# Altium schematic symbol library SG2002_QFN88_38_20230301_4L_V1.3_16.2_Library.SchLib: 126 symbols (part 4 of 5)
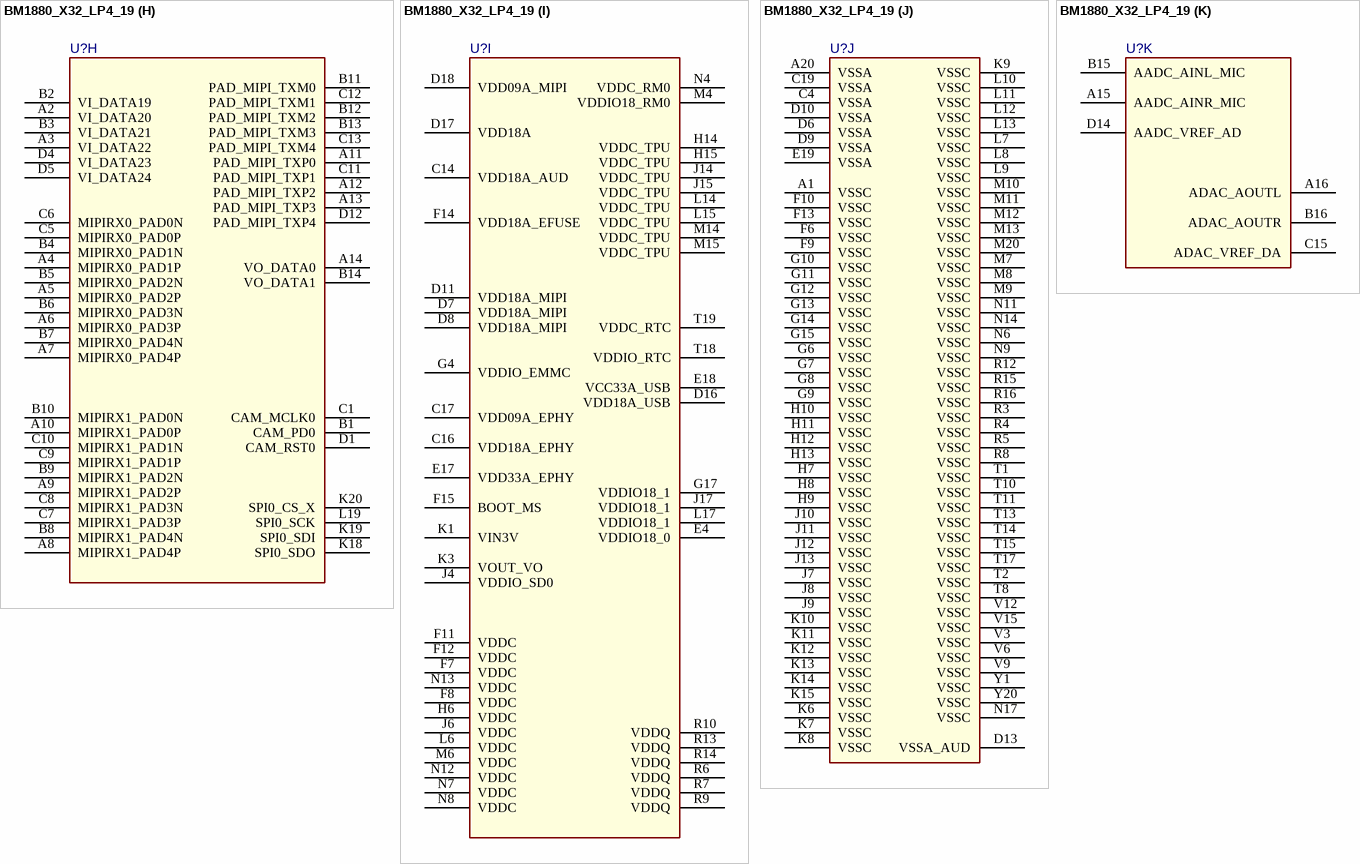
[diagram p52: symbol BM1880_X32_LP4_19]

## BM1880_X32_LP4_19
designator U?
SWAP_INFO: (S1+S2+S3+S4+S5+S6+S7+S8+S9+S10); SPLIT_INST: TRUE
footprint BGA378-26-2121-socket
part A pins: N10 VDD18A_MIPI(DDR_CAP), R11 VDD_RX, T3 PAD_CSB1______|D3C_CS1_N__|D3S_CS1_N__|D4C_CS1_N__|D4S_CS1_N__|LP4_CHB_CS_N__|, T4 PAD_CA_2______|D3C_ODT1___|D3S_ODT1___|D4C_ODT1___|D4S_ODT1___|______________|, T5 PAD_CKE1______|D3C_CKE1___|D3S_CKE1___|D4C_CKE1___|D4S_CKE1___|LP4_CKEB______|, T6 PAD_CLKN1_____|D3C_CK1N___|D3S_CK1N___|D4C_CK1_N__|D4S_CK1_N__|LP4_CKB_N_____|, T7 PAD_CLKP1_____|D3C_CK1P___|D3S_CK1P___|D4C_CK1_P__|D4S_CK1_P__|LP4_CKB_P_____|, T20 ZQ, U1 PAD_CA_3______|D3C_A7_____|D3S_A8_____|D4C_A8_____|D4S_A13____|LP4_CA3_______|, U2 PAD_CA_0______|D3C_A8_____|D3S_A14____|D4C_A11____|D4S_A7_____|LP4_CA2_______|, U3 PAD_RESETZ____|D3C_RESET_N|D3S_RESET_N|D4C_RESET_N|D4S_RESET_N|LP4_RESET_N___|, U4 PAD_CA_9______|D3C_A13____|D3S_A9_____|D4C_A7_____|D4S_A0_____|______________|, U5 PAD_CA_14_____|D3C_A15____|D3S_WE_N___|D4C_WE/A14_|D4S_BG0____|______________|, U6 PAD_CA_16_____|D3C_A10____|D3S_CAS_N__|D4C_CAS_N__|D4S_WE/A14_|______________|, U7 PAD_CLKN0_____|D3C_CK_N___|D3S_CK_N___|D4C_CK0_N__|D4S_CK0_N__|LP4_CKA_N_____|, U8 PAD_CLKP0_____|D3C_CK_P___|D3S_CK_P___|D4C_CK0_P__|D4S_CK0_P__|LP4_CKA_P_____|, U9 PAD_DQ_BYTE0_1|D3C_DQ1____|D3S_DQ6____|D4C_DQ23___|D4S_DQ0____|LP4_CHB_DQ7___|, U10 PAD_DQSN_BYTE0|D3C_DQS0_N_|D3S_DQS0_N_|D4C_DQS2_N_|D4S_DQS0_N_|LP4_CHB_DQS0_N|, U11 PAD_DQSP_BYTE0|D3C_DQS0_P_|D3S_DQS0_P_|D4C_DQS2_P_|D4S_DQS0_P_|LP4_CHB_DQS0_P|, U12 PAD_DQ_BYTE1_4|D3C_DQ21___|D3S_DQ15___|D4C_DQ7____|D4S_DQ8____|LP4_CHB_DQ8___|, U13 PAD_DQSN_BYTE1|D3C_DQS2_N_|D3S_DQS1_N_|D4C_DQS0_N_|D4S_DQS1_N_|LP4_CHB_DQS1_N|, U14 PAD_DQSP_BYTE1|D3C_DQS2_P_|D3S_DQS1_P_|D4C_DQS0_P_|D4S_DQS1_P_|LP4_CHB_DQS1_P|, U15 PAD_DQ_BYTE2_5|D3C_DQ26___|D3S_DQ22___|D4C_DQ11___|D4S_DQ16___|LP4_CHA_DQ3___|, U16 PAD_DQSN_BYTE2|D3C_DQS3_N_|D3S_DQS2_N_|D4C_DQS1_N_|D4S_DQS2_N_|LP4_CHA_DQS0_N|, U17 PAD_DQSP_BYTE2|D3C_DQS3_P_|D3S_DQS2_P_|D4C_DQS1_P_|D4S_DQS2_P_|LP4_CHA_DQS0_P|, U18 PAD_DQ_BYTE3_6|D3C_DQ11___|D3S_DQ29___|D4C_DQ25___|D4S_DQ24___|LP4_CHA_DM1___|, U19 PAD_DQSN_BYTE3|D3C_DQS1_N_|D3S_DQS3_N_|D4C_DQS3_N_|D4S_DQS3_N_|LP4_CHA_DQS1_N|, U20 PAD_DQSP_BYTE3|D3C_DQS1_P_|D3S_DQS3_P_|D4C_DQS3_P_|D4S_DQS3_P_|LP4_CHA_DQS1_P|, V1 PAD_CA_1______|D3C_A5_____|D3S_A11____|D4C_A6_____|D4S_A11____|LP4_CA4_______|, V2 PAD_CA_4______|D3C_A9_____|D3S_A2_____|D4C_A13____|D4S_A6_____|______________|, V4 PAD_CA_12_____|D3C_A6_____|D3S_BA2____|D4C_BA0____|D4S_BA0____|______________|, V5 PAD_CA_8______|D3C_BA0____|D3S_BA0____|D4C_A3_____|D4S_A4_____|______________|, V7 PAD_CA_19_____|D3C_WE_N___|D3S_ODT____|D4C_ACT_N__|D4S_A10____|LP4_CA0_______|, V8 VREF-LP4_NC, V10 PAD_DQ_BYTE0_4|D3C_DQ5____|D3S_DQ4____|D4C_DQ19___|D4S_DQ4____|LP4_CHB_DQ6___|, V11 PAD_DQ_BYTE0_8|D3C_DM0____|D3S_DQ2____|D4C_DQ16___|D4S_DQ2____|LP4_CHB_DQ5___|, V13 PAD_DQ_BYTE1_8|D3C_DQ23___|D3S_DQ11___|D4C_DQ3____|D4S_DQ10___|LP4_CHB_DQ9___|, V14 PAD_DQ_BYTE1_6|D3C_DQ22___|D3S_DM1____|D4C_DM0____|D4S_DM1____|LP4_CHB_DQ11__|, V16 PAD_DQ_BYTE2_7|D3C_DQ30___|D3S_DQ20___|D4C_DQ13___|D4S_DQ20___|LP4_CHA_DQ4___|, V17 PAD_DQ_BYTE2_8|D3C_DQ29___|D3S_DQ18___|D4C_DQ9____|D4S_DQ18___|LP4_CHA_DQ6___|, V18 PAD_DQ_BYTE3_7|D3C_DQ10___|D3S_DQ25___|D4C_DQ29___|D4S_DQ30___|LP4_CHA_DQ10__|, V19 PAD_DQ_BYTE3_0|D3C_DQ14___|D3S_DM3____|D4C_DQ27___|D4S_DM3____|LP4_CHA_DQ11__|, V20 PAD_DQ_BYTE3_2|D3C_DQ12___|D3S_DQ26___|D4C_DQ30___|D4S_DQ27___|LP4_CHA_DQ8___|, W1 PAD_CA_6______|D3C_A2_____|D3S_A5_____|D4C_A2_____|D4S_A2_____|LP4_CA5_______|, W2 PAD_CA_5______|D3C_A14____|D3S_A0_____|D4C_A0_____|D4S_A8_____|LP4_CB5_______|, W3 PAD_CA_7______|D3C_A11____|D3S_A3_____|D4C_A5_____|D4S_A5_____|______________|, W4 PAD_CA_11_____|D3C_A0_____|D3S_A4_____|D4C_A1_____|D4S_BA1____|______________|, W5 PAD_CA_17_____|D3C_A12____|D3S_BA1____|D4C_BA1____|D4S_CAS_N__|LP4_CB3_______|, W6 PAD_CA_18_____|D3C_BA1____|D3S_A10____|D4C_A12____|D4S_RAS_N__|LP4_CB1_______|, W7 PAD_CA_20_____|D3C_CAS_N__|D3S_RAS_N__|c__________|D4S_ACT_N__|LP4_CA1_______|, W8 PAD_CA_23_____|D3C_RAS_N__|D3S_A7_____|___________|___________|______________|, W9 PAD_DQ_BYTE0_2|D3C_DQ3____|D3S_DQ7____|D4C_DQ18___|D4S_DQ7____|LP4_CHB_DQ0___|, W10 PAD_DQ_BYTE0_5|D3C_DQ6____|D3S_DQ1____|D4C_DQ22___|D4S_DQ5____|LP4_CHB_DQ1___|, W11 PAD_DQ_BYTE0_7|D3C_DQ0____|D3S_DM0____|D4C_DQ17___|D4S_DM0____|LP4_CHB_DQ4___|, W12 PAD_DQ_BYTE1_2|D3C_DQ20___|D3S_DQ13___|D4C_DQ6____|D4S_DQ12___|LP4_CHB_DQ15__|, W13 PAD_DQ_BYTE1_1|D3C_DQ17___|D3S_DQ12___|D4C_DQ4____|D4S_DQ9____|LP4_CHB_DQ13__|, W14 PAD_DQ_BYTE1_7|D3C_DM2____|D3S_DQ10___|D4C_DQ1____|D4S_DQ11___|LP4_CHB_DQ10__|, W15 PAD_DQ_BYTE2_2|D3C_DQ28___|D3S_DQ23___|D4C_DQ12___|D4S_DQ23___|LP4_CHA_DQ2___|, W16 PAD_DQ_BYTE2_1|D3C_DQ25___|D3S_DQ17___|D4C_DQ10___|D4S_DQ21___|LP4_CHA_DQ1___|, W17 PAD_DQ_BYTE2_4|D3C_DQ31___|D3S_DM2____|D4C_DQ15___|D4S_DM2____|LP4_CHA_DQ7___|, W18 PAD_DQ_BYTE3_4|D3C_DQ13___|D3S_DQ27___|D4C_DQ31___|D4S_DQ26___|LP4_CHA_DQ12__|, W19 PAD_DQ_BYTE3_5|D3C_DM1____|D3S_DQ30___|D4C_DM3____|D4S_DQ29___|LP4_CHA_DQ9___|, W20 PAD_DQ_BYTE3_8|D3C_DQ8A___|D3S_DQ28___|D4C_DQ24___|D4S_DQ25___|LP4_CHA_DQ15__|, Y2 PAD_CA_10_____|D3C_A3_____|D3S_A6_____|D4C_A9_____|D4S_A9_____|LP4_CB4_______|, Y3 PAD_CA_15_____|D3C_A4_____|D3S_A1_____|D4C_A4_____|D4S_A1_____|______________|, Y4 PAD_CA_13_____|D3C_A1_____|D3S_A12____|D4C_BG0____|D4S_A3_____|LP4_CB2_______|, Y5 PAD_CA_21_____|D3C_BA2____|D3S_A15____|D4C_A10____|D4S_A12____|LP4_CB0_______|, Y6 PAD_CKE0______|D3C_CKE____|D3S_CKE____|D4C_CKE0___|D4S_CKE0___|LP4_CKEA______|, Y7 PAD_CA_22_____|D3C_ODT____|D3S_A13____|D4C_ODT0___|D4S_ODT0___|______________|, Y8 PAD_CSB0______|D3C_CS_N___|D3S_CS0_N__|D4C_CS0_N__|D4S_CS0_N__|LP4_CHA_CS_N__|, Y9 PAD_DQ_BYTE0_0|D3C_DQ4____|D3S_DQ0____|D4C_DM2____|D4S_DQ6____|LP4_CHB_DM0___|, Y10 PAD_DQ_BYTE0_3|D3C_DQ7____|D3S_DQ5____|D4C_DQ20___|D4S_DQ3____|LP4_CHB_DQ2___|, Y11 PAD_DQ_BYTE0_6|D3C_DQ2____|D3S_DQ3____|D4C_DQ21___|D4S_DQ1____|LP4_CHB_DQ3___|, Y12 PAD_DQ_BYTE1_0|D3C_DQ19___|D3S_DQ8____|D4C_DQ2____|D4S_DQ15___|LP4_CHB_DM1___|, Y13 PAD_DQ_BYTE1_3|D3C_DQ16___|D3S_DQ9____|D4C_DQ5____|D4S_DQ14___|LP4_CHB_DQ14__|, Y14 PAD_DQ_BYTE1_5|D3C_DQ18___|D3S_DQ14___|D4C_DQ0____|D4S_DQ13___|LP4_CHB_DQ12__|, Y15 PAD_DQ_BYTE2_0|D3C_DM3____|D3S_DQ16___|D4C_DM1____|D4S_DQ22___|LP4_CHA_DQ5___|, Y16 PAD_DQ_BYTE2_3|D3C_DQ27___|D3S_DQ21___|D4C_DQ8____|D4S_DQ19___|LP4_CHA_DM0___|, Y17 PAD_DQ_BYTE2_6|D3C_DQ24___|D3S_DQ19___|D4C_DQ14___|D4S_DQ17___|LP4_CHA_DQ0___|, Y18 PAD_DQ_BYTE3_1|D3C_DQ9____|D3S_DQ31___|D4C_DQ26___|D4S_DQ28___|LP4_CHA_DQ13__|, Y19 PAD_DQ_BYTE3_3|D3C_DQ15___|D3S_DQ24___|D4C_DQ28___|D4S_DQ31___|LP4_CHA_DQ14__|
part B pins: F3 SDIO0_PWR_EN, F4 SDIO0_CD, G1 EMMC_DAT3, G2 EMMC_RSTN, H1 EMMC_DAT1, H2 EMMC_DAT0, H3 EMMC_CMD, H4 EMMC_CLK, J2 EMMC_CAP, J3 EMMC_DAT2, K2 SDIO0_CAP, K4 SDIO0_CMD, L1 SDIO0_CLK, L2 SDIO0_D0, L3 SDIO0_D3, L4 SDIO0_D1, M1 SDIO0_D2
part C pins: A19 USB_DP (power), B19 USB_DM (power), E20 USB_VBUS_DET (power), F19 USB_ID (power), F20 USB_VBUS_EN, N15 PTEST
part D pins: C2 IIC0_SDA, C3 IIC3_SCL, D2 IIC0_SCL, D3 IIC3_SDA, J18 IIC2_SCL, J19 IIC2_SDA, J20 IIC1_SCL, K17 IIC1_SDA, L18 PWM3, M17 PWM1, M18 PWM0_BUCK, M19 PWM2
part E pins: C18 ADC1, E1 JTAG_CPU_TCK, E3 JTAG_CPU_TRST, F1 UART0_RX, F2 UART0_TX, F17 UART1_RTS, F18 UART1_CTS, G3 JTAG_CPU_TMS, G18 UART2_CTS, G19 UART1_RX, G20 UART1_TX, H17 UART2_TX, H18 UART2_RX, H19 UART2_RTS
part F pins: A17 EPHY_TXN, A18 EPHY_RXN, B17 EPHY_TXP, B18 EPHY_RXP, D15 EPHY_RTX, M2 RMII0_REFCLKI, M3 RMII0_TXD1, N2 RMII0_TXEN, N3 RMII0_TXD0, P1 RMII0_MDCK, P2 RMII0_MDIO, P3 RMII0_RXD0, P4 RMII0_RST, R1 RMII0_RXDV, R2 RMII0_RXD1
part G pins: B20 XTAL_XIN_XO, C20 XTAL_XIN_XI, D19 CLK32K, D20 CLK25M, E2 RSTN, N18 PWR_ON, N19 PWR_SEQ2, N20 PWR_SEQ3, P17 PWR_WAKEUP1, P18 PWR_VBAT_DET, P19 PWR_BUTTON1, P20 PWR_SEQ1, R17 PWR_WAKEUP0, R18 RTC_MODE, R19 RTC_XIN, R20 RTC_XOUT
part H pins: A2 VI_DATA20 (power), A3 VI_DATA22 (power), A4 MIPIRX0_PAD1P (power), A5 MIPIRX0_PAD2P (power), A6 MIPIRX0_PAD3P (power), A7 MIPIRX0_PAD4P (power), A8 MIPIRX1_PAD4P (power), A9 MIPIRX1_PAD2P (power), A10 MIPIRX1_PAD0P (power), A11 PAD_MIPI_TXP0 (power), A12 PAD_MIPI_TXP2 (power), A13 PAD_MIPI_TXP3 (power), A14 VO_DATA0 (power), B1 CAM_PD0, B2 VI_DATA19 (power), B3 VI_DATA21 (power), B4 MIPIRX0_PAD1N (power), B5 MIPIRX0_PAD2N (power), B6 MIPIRX0_PAD3N (power), B7 MIPIRX0_PAD4N (power), B8 MIPIRX1_PAD4N (power), B9 MIPIRX1_PAD2N (power), B10 MIPIRX1_PAD0N (power), B11 PAD_MIPI_TXM0 (power), B12 PAD_MIPI_TXM2 (power), B13 PAD_MIPI_TXM3 (power), B14 VO_DATA1 (power), C1 CAM_MCLK0, C5 MIPIRX0_PAD0P (power), C6 MIPIRX0_PAD0N (power), C7 MIPIRX1_PAD3P (power), C8 MIPIRX1_PAD3N (power), C9 MIPIRX1_PAD1P (power), C10 MIPIRX1_PAD1N (power), C11 PAD_MIPI_TXP1 (power), C12 PAD_MIPI_TXM1 (power), C13 PAD_MIPI_TXM4 (power), D1 CAM_RST0, D4 VI_DATA23 (power), D5 VI_DATA24 (power), D12 PAD_MIPI_TXP4 (power), K18 SPI0_SDO, K19 SPI0_SDI, K20 SPI0_CS_X, L19 SPI0_SCK
part I pins: C14 VDD18A_AUD (power), C16 VDD18A_EPHY (power), C17 VDD09A_EPHY (power), D7 VDD18A_MIPI (power), D8 VDD18A_MIPI (power), D11 VDD18A_MIPI (power), D16 VDD18A_USB, D17 VDD18A (power), D18 VDD09A_MIPI (power), E4 VDDIO18_0 (power), E17 VDD33A_EPHY (power), E18 VCC33A_USB, F7 VDDC (power), F8 VDDC (power), F11 VDDC (power), F12 VDDC (power), F14 VDD18A_EFUSE (power), F15 BOOT_MS, G4 VDDIO_EMMC (power), G17 VDDIO18_1 (power), H6 VDDC (power), H14 VDDC_TPU (power), H15 VDDC_TPU (power), J4 VDDIO_SD0 (power), J6 VDDC (power), J14 VDDC_TPU (power), J15 VDDC_TPU (power), J17 VDDIO18_1 (power), K1 VIN3V (power), K3 VOUT_VO (power), L6 VDDC (power), L14 VDDC_TPU (power), L15 VDDC_TPU (power), L17 VDDIO18_1 (power), M4 VDDIO18_RM0 (power), M6 VDDC (power), M14 VDDC_TPU (power), M15 VDDC_TPU (power), N4 VDDC_RM0 (power), N7 VDDC (power), N8 VDDC (power), N12 VDDC (power), N13 VDDC (power), R6 VDDQ (power), R7 VDDQ (power), R9 VDDQ (power), R10 VDDQ (power), R13 VDDQ (power), R14 VDDQ (power), T18 VDDIO_RTC (power), T19 VDDC_RTC (power)
part J pins: A1 VSSC, A20 VSSA, C4 VSSA, C19 VSSA, D6 VSSA, D9 VSSA, D10 VSSA, D13 VSSA_AUD, E19 VSSA, F6 VSSC, F9 VSSC, F10 VSSC, F13 VSSC, G6 VSSC, G7 VSSC, G8 VSSC, G9 VSSC, G10 VSSC, G11 VSSC, G12 VSSC, G13 VSSC, G14 VSSC, G15 VSSC, H7 VSSC, H8 VSSC, H9 VSSC, H10 VSSC, H11 VSSC, H12 VSSC, H13 VSSC, J7 VSSC, J8 VSSC, J9 VSSC, J10 VSSC, J11 VSSC, J12 VSSC, J13 VSSC, K6 VSSC, K7 VSSC, K8 VSSC, K9 VSSC, K10 VSSC, K11 VSSC, K12 VSSC, K13 VSSC, K14 VSSC, K15 VSSC, L7 VSSC, L8 VSSC, L9 VSSC, L10 VSSC, L11 VSSC, L12 VSSC, L13 VSSC, M7 VSSC, M8 VSSC, M9 VSSC, M10 VSSC, M11 VSSC, M12 VSSC, M13 VSSC, M20 VSSC, N6 VSSC, N9 VSSC, N11 VSSC, N14 VSSC, N17 VSSC, R3 VSSC, R4 VSSC, R5 VSSC, R8 VSSC, R12 VSSC, R15 VSSC, R16 VSSC, T1 VSSC, T2 VSSC, T8 VSSC, T10 VSSC, T11 VSSC, T13 VSSC, T14 VSSC, T15 VSSC, T17 VSSC, V3 VSSC, V6 VSSC, V9 VSSC, V12 VSSC, V15 VSSC, Y1 VSSC, Y20 VSSC
part K pins: A15 AADC_AINR_MIC, A16 ADAC_AOUTL, B15 AADC_AINL_MIC, B16 ADAC_AOUTR, C15 ADAC_VREF_DA, D14 AADC_VREF_AD
part A text: MIU_internal

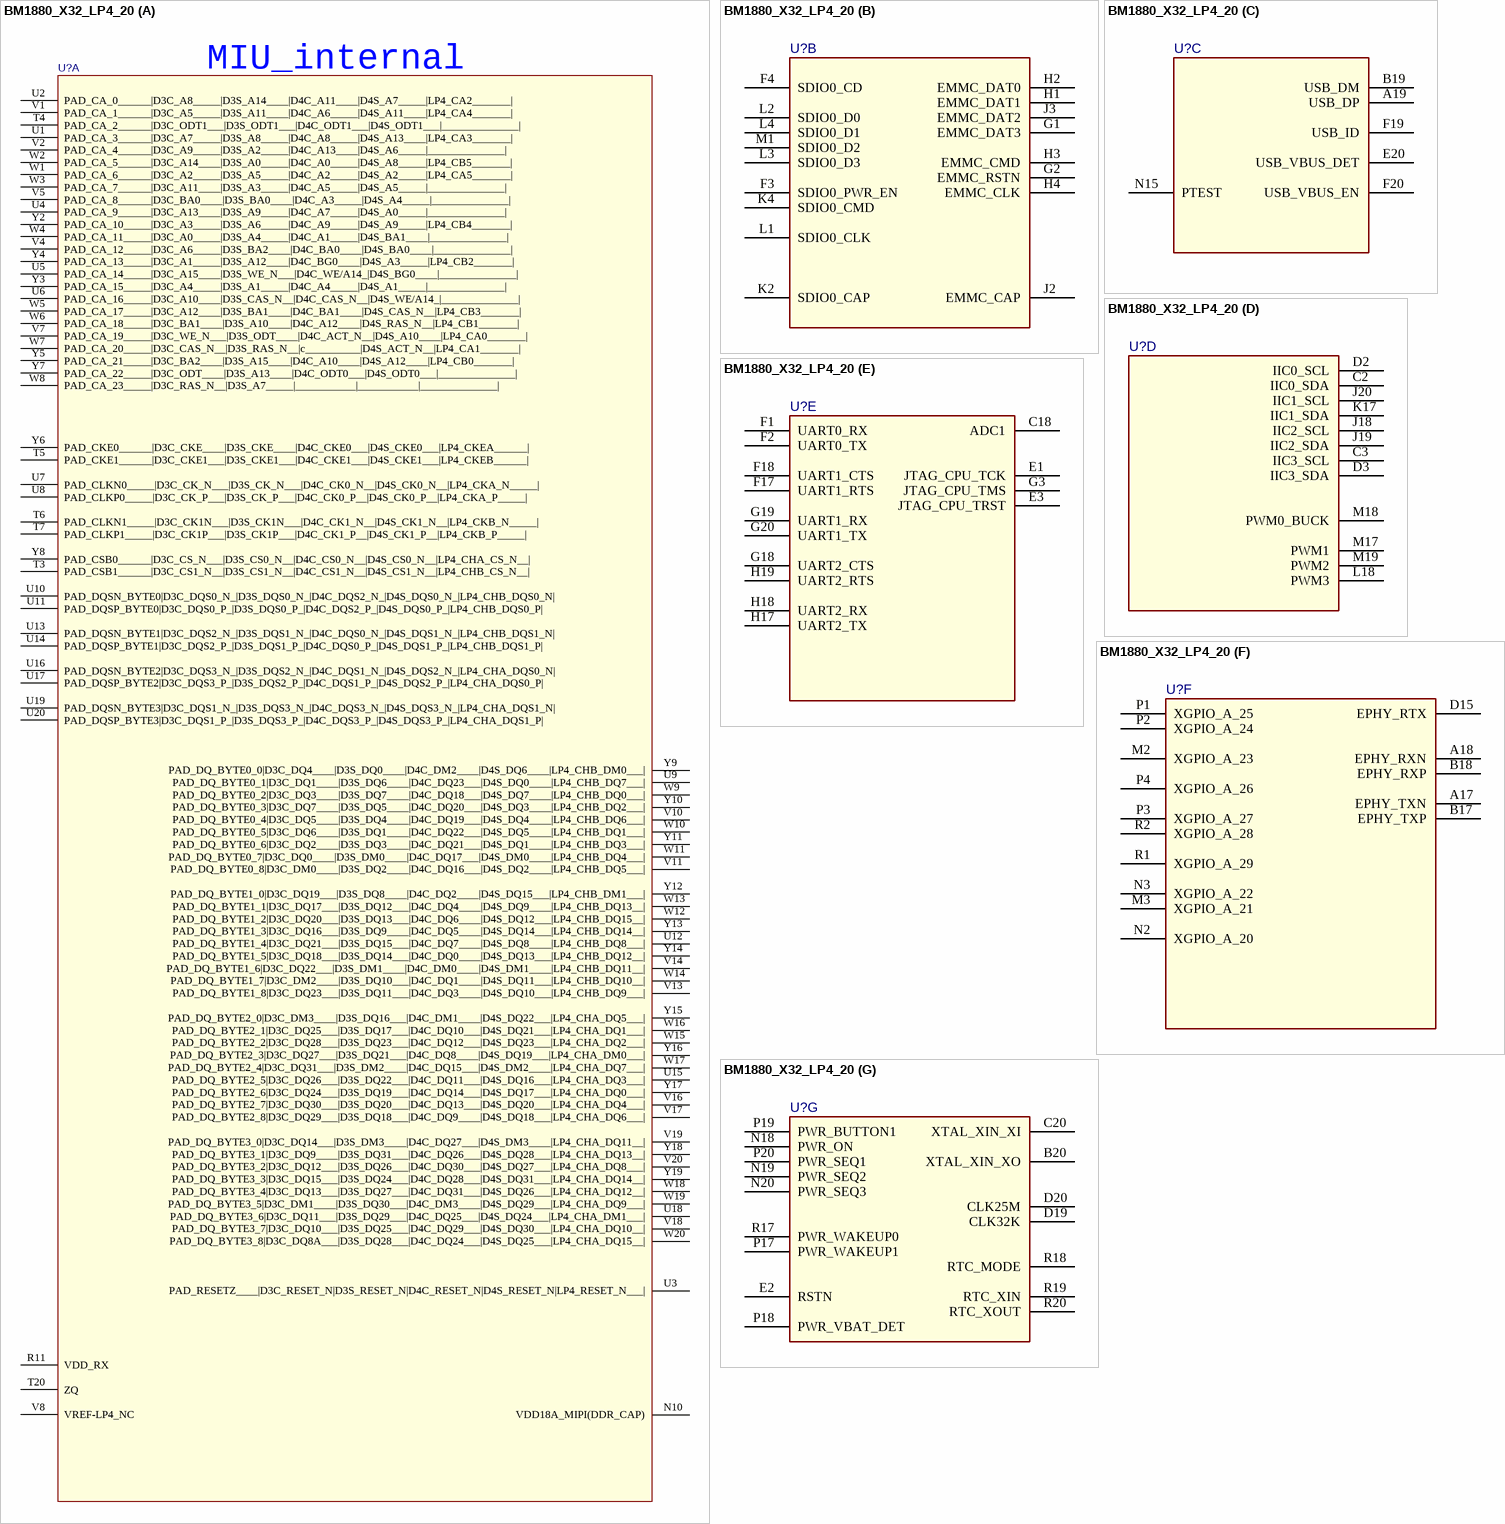
[diagram p38: symbol BM1880_X32_LP4_20]

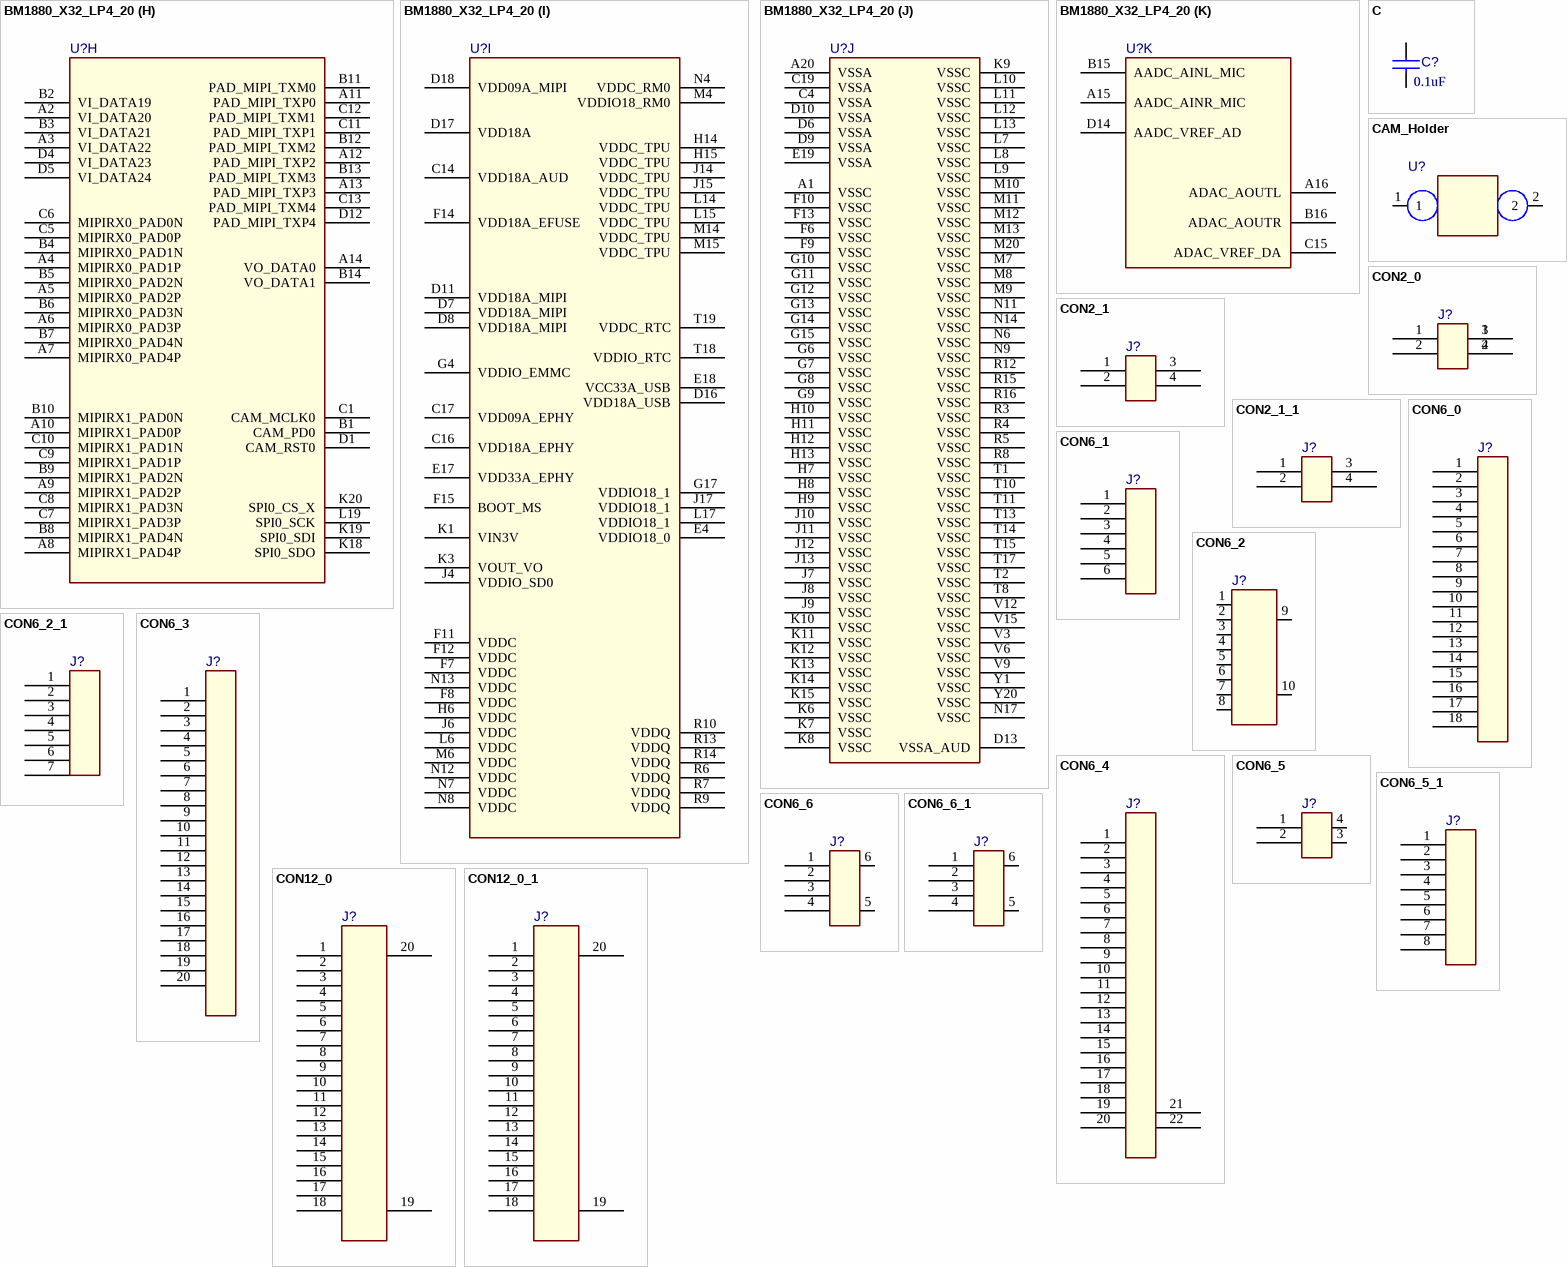
[diagram p39: symbols BM1880_X32_LP4_20 to CON12_0_1]

## BM1880_X32_LP4_20
designator U?
SWAP_INFO: (S1+S2+S3+S4+S5+S6+S7+S8+S9+S10); SPLIT_INST: TRUE
footprint BGA378-26-2121-socket
part A pins: N10 VDD18A_MIPI(DDR_CAP), R11 VDD_RX, T3 PAD_CSB1______|D3C_CS1_N__|D3S_CS1_N__|D4C_CS1_N__|D4S_CS1_N__|LP4_CHB_CS_N__|, T4 PAD_CA_2______|D3C_ODT1___|D3S_ODT1___|D4C_ODT1___|D4S_ODT1___|______________|, T5 PAD_CKE1______|D3C_CKE1___|D3S_CKE1___|D4C_CKE1___|D4S_CKE1___|LP4_CKEB______|, T6 PAD_CLKN1_____|D3C_CK1N___|D3S_CK1N___|D4C_CK1_N__|D4S_CK1_N__|LP4_CKB_N_____|, T7 PAD_CLKP1_____|D3C_CK1P___|D3S_CK1P___|D4C_CK1_P__|D4S_CK1_P__|LP4_CKB_P_____|, T20 ZQ, U1 PAD_CA_3______|D3C_A7_____|D3S_A8_____|D4C_A8_____|D4S_A13____|LP4_CA3_______|, U2 PAD_CA_0______|D3C_A8_____|D3S_A14____|D4C_A11____|D4S_A7_____|LP4_CA2_______|, U3 PAD_RESETZ____|D3C_RESET_N|D3S_RESET_N|D4C_RESET_N|D4S_RESET_N|LP4_RESET_N___|, U4 PAD_CA_9______|D3C_A13____|D3S_A9_____|D4C_A7_____|D4S_A0_____|______________|, U5 PAD_CA_14_____|D3C_A15____|D3S_WE_N___|D4C_WE/A14_|D4S_BG0____|______________|, U6 PAD_CA_16_____|D3C_A10____|D3S_CAS_N__|D4C_CAS_N__|D4S_WE/A14_|______________|, U7 PAD_CLKN0_____|D3C_CK_N___|D3S_CK_N___|D4C_CK0_N__|D4S_CK0_N__|LP4_CKA_N_____|, U8 PAD_CLKP0_____|D3C_CK_P___|D3S_CK_P___|D4C_CK0_P__|D4S_CK0_P__|LP4_CKA_P_____|, U9 PAD_DQ_BYTE0_1|D3C_DQ1____|D3S_DQ6____|D4C_DQ23___|D4S_DQ0____|LP4_CHB_DQ7___|, U10 PAD_DQSN_BYTE0|D3C_DQS0_N_|D3S_DQS0_N_|D4C_DQS2_N_|D4S_DQS0_N_|LP4_CHB_DQS0_N|, U11 PAD_DQSP_BYTE0|D3C_DQS0_P_|D3S_DQS0_P_|D4C_DQS2_P_|D4S_DQS0_P_|LP4_CHB_DQS0_P|, U12 PAD_DQ_BYTE1_4|D3C_DQ21___|D3S_DQ15___|D4C_DQ7____|D4S_DQ8____|LP4_CHB_DQ8___|, U13 PAD_DQSN_BYTE1|D3C_DQS2_N_|D3S_DQS1_N_|D4C_DQS0_N_|D4S_DQS1_N_|LP4_CHB_DQS1_N|, U14 PAD_DQSP_BYTE1|D3C_DQS2_P_|D3S_DQS1_P_|D4C_DQS0_P_|D4S_DQS1_P_|LP4_CHB_DQS1_P|, U15 PAD_DQ_BYTE2_5|D3C_DQ26___|D3S_DQ22___|D4C_DQ11___|D4S_DQ16___|LP4_CHA_DQ3___|, U16 PAD_DQSN_BYTE2|D3C_DQS3_N_|D3S_DQS2_N_|D4C_DQS1_N_|D4S_DQS2_N_|LP4_CHA_DQS0_N|, U17 PAD_DQSP_BYTE2|D3C_DQS3_P_|D3S_DQS2_P_|D4C_DQS1_P_|D4S_DQS2_P_|LP4_CHA_DQS0_P|, U18 PAD_DQ_BYTE3_6|D3C_DQ11___|D3S_DQ29___|D4C_DQ25___|D4S_DQ24___|LP4_CHA_DM1___|, U19 PAD_DQSN_BYTE3|D3C_DQS1_N_|D3S_DQS3_N_|D4C_DQS3_N_|D4S_DQS3_N_|LP4_CHA_DQS1_N|, U20 PAD_DQSP_BYTE3|D3C_DQS1_P_|D3S_DQS3_P_|D4C_DQS3_P_|D4S_DQS3_P_|LP4_CHA_DQS1_P|, V1 PAD_CA_1______|D3C_A5_____|D3S_A11____|D4C_A6_____|D4S_A11____|LP4_CA4_______|, V2 PAD_CA_4______|D3C_A9_____|D3S_A2_____|D4C_A13____|D4S_A6_____|______________|, V4 PAD_CA_12_____|D3C_A6_____|D3S_BA2____|D4C_BA0____|D4S_BA0____|______________|, V5 PAD_CA_8______|D3C_BA0____|D3S_BA0____|D4C_A3_____|D4S_A4_____|______________|, V7 PAD_CA_19_____|D3C_WE_N___|D3S_ODT____|D4C_ACT_N__|D4S_A10____|LP4_CA0_______|, V8 VREF-LP4_NC, V10 PAD_DQ_BYTE0_4|D3C_DQ5____|D3S_DQ4____|D4C_DQ19___|D4S_DQ4____|LP4_CHB_DQ6___|, V11 PAD_DQ_BYTE0_8|D3C_DM0____|D3S_DQ2____|D4C_DQ16___|D4S_DQ2____|LP4_CHB_DQ5___|, V13 PAD_DQ_BYTE1_8|D3C_DQ23___|D3S_DQ11___|D4C_DQ3____|D4S_DQ10___|LP4_CHB_DQ9___|, V14 PAD_DQ_BYTE1_6|D3C_DQ22___|D3S_DM1____|D4C_DM0____|D4S_DM1____|LP4_CHB_DQ11__|, V16 PAD_DQ_BYTE2_7|D3C_DQ30___|D3S_DQ20___|D4C_DQ13___|D4S_DQ20___|LP4_CHA_DQ4___|, V17 PAD_DQ_BYTE2_8|D3C_DQ29___|D3S_DQ18___|D4C_DQ9____|D4S_DQ18___|LP4_CHA_DQ6___|, V18 PAD_DQ_BYTE3_7|D3C_DQ10___|D3S_DQ25___|D4C_DQ29___|D4S_DQ30___|LP4_CHA_DQ10__|, V19 PAD_DQ_BYTE3_0|D3C_DQ14___|D3S_DM3____|D4C_DQ27___|D4S_DM3____|LP4_CHA_DQ11__|, V20 PAD_DQ_BYTE3_2|D3C_DQ12___|D3S_DQ26___|D4C_DQ30___|D4S_DQ27___|LP4_CHA_DQ8___|, W1 PAD_CA_6______|D3C_A2_____|D3S_A5_____|D4C_A2_____|D4S_A2_____|LP4_CA5_______|, W2 PAD_CA_5______|D3C_A14____|D3S_A0_____|D4C_A0_____|D4S_A8_____|LP4_CB5_______|, W3 PAD_CA_7______|D3C_A11____|D3S_A3_____|D4C_A5_____|D4S_A5_____|______________|, W4 PAD_CA_11_____|D3C_A0_____|D3S_A4_____|D4C_A1_____|D4S_BA1____|______________|, W5 PAD_CA_17_____|D3C_A12____|D3S_BA1____|D4C_BA1____|D4S_CAS_N__|LP4_CB3_______|, W6 PAD_CA_18_____|D3C_BA1____|D3S_A10____|D4C_A12____|D4S_RAS_N__|LP4_CB1_______|, W7 PAD_CA_20_____|D3C_CAS_N__|D3S_RAS_N__|c__________|D4S_ACT_N__|LP4_CA1_______|, W8 PAD_CA_23_____|D3C_RAS_N__|D3S_A7_____|___________|___________|______________|, W9 PAD_DQ_BYTE0_2|D3C_DQ3____|D3S_DQ7____|D4C_DQ18___|D4S_DQ7____|LP4_CHB_DQ0___|, W10 PAD_DQ_BYTE0_5|D3C_DQ6____|D3S_DQ1____|D4C_DQ22___|D4S_DQ5____|LP4_CHB_DQ1___|, W11 PAD_DQ_BYTE0_7|D3C_DQ0____|D3S_DM0____|D4C_DQ17___|D4S_DM0____|LP4_CHB_DQ4___|, W12 PAD_DQ_BYTE1_2|D3C_DQ20___|D3S_DQ13___|D4C_DQ6____|D4S_DQ12___|LP4_CHB_DQ15__|, W13 PAD_DQ_BYTE1_1|D3C_DQ17___|D3S_DQ12___|D4C_DQ4____|D4S_DQ9____|LP4_CHB_DQ13__|, W14 PAD_DQ_BYTE1_7|D3C_DM2____|D3S_DQ10___|D4C_DQ1____|D4S_DQ11___|LP4_CHB_DQ10__|, W15 PAD_DQ_BYTE2_2|D3C_DQ28___|D3S_DQ23___|D4C_DQ12___|D4S_DQ23___|LP4_CHA_DQ2___|, W16 PAD_DQ_BYTE2_1|D3C_DQ25___|D3S_DQ17___|D4C_DQ10___|D4S_DQ21___|LP4_CHA_DQ1___|, W17 PAD_DQ_BYTE2_4|D3C_DQ31___|D3S_DM2____|D4C_DQ15___|D4S_DM2____|LP4_CHA_DQ7___|, W18 PAD_DQ_BYTE3_4|D3C_DQ13___|D3S_DQ27___|D4C_DQ31___|D4S_DQ26___|LP4_CHA_DQ12__|, W19 PAD_DQ_BYTE3_5|D3C_DM1____|D3S_DQ30___|D4C_DM3____|D4S_DQ29___|LP4_CHA_DQ9___|, W20 PAD_DQ_BYTE3_8|D3C_DQ8A___|D3S_DQ28___|D4C_DQ24___|D4S_DQ25___|LP4_CHA_DQ15__|, Y2 PAD_CA_10_____|D3C_A3_____|D3S_A6_____|D4C_A9_____|D4S_A9_____|LP4_CB4_______|, Y3 PAD_CA_15_____|D3C_A4_____|D3S_A1_____|D4C_A4_____|D4S_A1_____|______________|, Y4 PAD_CA_13_____|D3C_A1_____|D3S_A12____|D4C_BG0____|D4S_A3_____|LP4_CB2_______|, Y5 PAD_CA_21_____|D3C_BA2____|D3S_A15____|D4C_A10____|D4S_A12____|LP4_CB0_______|, Y6 PAD_CKE0______|D3C_CKE____|D3S_CKE____|D4C_CKE0___|D4S_CKE0___|LP4_CKEA______|, Y7 PAD_CA_22_____|D3C_ODT____|D3S_A13____|D4C_ODT0___|D4S_ODT0___|______________|, Y8 PAD_CSB0______|D3C_CS_N___|D3S_CS0_N__|D4C_CS0_N__|D4S_CS0_N__|LP4_CHA_CS_N__|, Y9 PAD_DQ_BYTE0_0|D3C_DQ4____|D3S_DQ0____|D4C_DM2____|D4S_DQ6____|LP4_CHB_DM0___|, Y10 PAD_DQ_BYTE0_3|D3C_DQ7____|D3S_DQ5____|D4C_DQ20___|D4S_DQ3____|LP4_CHB_DQ2___|, Y11 PAD_DQ_BYTE0_6|D3C_DQ2____|D3S_DQ3____|D4C_DQ21___|D4S_DQ1____|LP4_CHB_DQ3___|, Y12 PAD_DQ_BYTE1_0|D3C_DQ19___|D3S_DQ8____|D4C_DQ2____|D4S_DQ15___|LP4_CHB_DM1___|, Y13 PAD_DQ_BYTE1_3|D3C_DQ16___|D3S_DQ9____|D4C_DQ5____|D4S_DQ14___|LP4_CHB_DQ14__|, Y14 PAD_DQ_BYTE1_5|D3C_DQ18___|D3S_DQ14___|D4C_DQ0____|D4S_DQ13___|LP4_CHB_DQ12__|, Y15 PAD_DQ_BYTE2_0|D3C_DM3____|D3S_DQ16___|D4C_DM1____|D4S_DQ22___|LP4_CHA_DQ5___|, Y16 PAD_DQ_BYTE2_3|D3C_DQ27___|D3S_DQ21___|D4C_DQ8____|D4S_DQ19___|LP4_CHA_DM0___|, Y17 PAD_DQ_BYTE2_6|D3C_DQ24___|D3S_DQ19___|D4C_DQ14___|D4S_DQ17___|LP4_CHA_DQ0___|, Y18 PAD_DQ_BYTE3_1|D3C_DQ9____|D3S_DQ31___|D4C_DQ26___|D4S_DQ28___|LP4_CHA_DQ13__|, Y19 PAD_DQ_BYTE3_3|D3C_DQ15___|D3S_DQ24___|D4C_DQ28___|D4S_DQ31___|LP4_CHA_DQ14__|
part B pins: F3 SDIO0_PWR_EN, F4 SDIO0_CD, G1 EMMC_DAT3, G2 EMMC_RSTN, H1 EMMC_DAT1, H2 EMMC_DAT0, H3 EMMC_CMD, H4 EMMC_CLK, J2 EMMC_CAP, J3 EMMC_DAT2, K2 SDIO0_CAP, K4 SDIO0_CMD, L1 SDIO0_CLK, L2 SDIO0_D0, L3 SDIO0_D3, L4 SDIO0_D1, M1 SDIO0_D2
part C pins: A19 USB_DP (power), B19 USB_DM (power), E20 USB_VBUS_DET (power), F19 USB_ID (power), F20 USB_VBUS_EN, N15 PTEST
part D pins: C2 IIC0_SDA, C3 IIC3_SCL, D2 IIC0_SCL, D3 IIC3_SDA, J18 IIC2_SCL, J19 IIC2_SDA, J20 IIC1_SCL, K17 IIC1_SDA, L18 PWM3, M17 PWM1, M18 PWM0_BUCK, M19 PWM2
part E pins: C18 ADC1, E1 JTAG_CPU_TCK, E3 JTAG_CPU_TRST, F1 UART0_RX, F2 UART0_TX, F17 UART1_RTS, F18 UART1_CTS, G3 JTAG_CPU_TMS, G18 UART2_CTS, G19 UART1_RX, G20 UART1_TX, H17 UART2_TX, H18 UART2_RX, H19 UART2_RTS
part F pins: A17 EPHY_TXN, A18 EPHY_RXN, B17 EPHY_TXP, B18 EPHY_RXP, D15 EPHY_RTX, M2 XGPIO_A_23, M3 XGPIO_A_21, N2 XGPIO_A_20, N3 XGPIO_A_22, P1 XGPIO_A_25, P2 XGPIO_A_24, P3 XGPIO_A_27, P4 XGPIO_A_26, R1 XGPIO_A_29, R2 XGPIO_A_28
part G pins: B20 XTAL_XIN_XO, C20 XTAL_XIN_XI, D19 CLK32K, D20 CLK25M, E2 RSTN, N18 PWR_ON, N19 PWR_SEQ2, N20 PWR_SEQ3, P17 PWR_WAKEUP1, P18 PWR_VBAT_DET, P19 PWR_BUTTON1, P20 PWR_SEQ1, R17 PWR_WAKEUP0, R18 RTC_MODE, R19 RTC_XIN, R20 RTC_XOUT
part H pins: A2 VI_DATA20 (power), A3 VI_DATA22 (power), A4 MIPIRX0_PAD1P (power), A5 MIPIRX0_PAD2P (power), A6 MIPIRX0_PAD3P (power), A7 MIPIRX0_PAD4P (power), A8 MIPIRX1_PAD4P (power), A9 MIPIRX1_PAD2P (power), A10 MIPIRX1_PAD0P (power), A11 PAD_MIPI_TXP0 (power), A12 PAD_MIPI_TXP2 (power), A13 PAD_MIPI_TXP3 (power), A14 VO_DATA0 (power), B1 CAM_PD0, B2 VI_DATA19 (power), B3 VI_DATA21 (power), B4 MIPIRX0_PAD1N (power), B5 MIPIRX0_PAD2N (power), B6 MIPIRX0_PAD3N (power), B7 MIPIRX0_PAD4N (power), B8 MIPIRX1_PAD4N (power), B9 MIPIRX1_PAD2N (power), B10 MIPIRX1_PAD0N (power), B11 PAD_MIPI_TXM0 (power), B12 PAD_MIPI_TXM2 (power), B13 PAD_MIPI_TXM3 (power), B14 VO_DATA1 (power), C1 CAM_MCLK0, C5 MIPIRX0_PAD0P (power), C6 MIPIRX0_PAD0N (power), C7 MIPIRX1_PAD3P (power), C8 MIPIRX1_PAD3N (power), C9 MIPIRX1_PAD1P (power), C10 MIPIRX1_PAD1N (power), C11 PAD_MIPI_TXP1 (power), C12 PAD_MIPI_TXM1 (power), C13 PAD_MIPI_TXM4 (power), D1 CAM_RST0, D4 VI_DATA23 (power), D5 VI_DATA24 (power), D12 PAD_MIPI_TXP4 (power), K18 SPI0_SDO, K19 SPI0_SDI, K20 SPI0_CS_X, L19 SPI0_SCK
part I pins: C14 VDD18A_AUD (power), C16 VDD18A_EPHY (power), C17 VDD09A_EPHY (power), D7 VDD18A_MIPI (power), D8 VDD18A_MIPI (power), D11 VDD18A_MIPI (power), D16 VDD18A_USB, D17 VDD18A (power), D18 VDD09A_MIPI (power), E4 VDDIO18_0 (power), E17 VDD33A_EPHY (power), E18 VCC33A_USB, F7 VDDC (power), F8 VDDC (power), F11 VDDC (power), F12 VDDC (power), F14 VDD18A_EFUSE (power), F15 BOOT_MS, G4 VDDIO_EMMC (power), G17 VDDIO18_1 (power), H6 VDDC (power), H14 VDDC_TPU (power), H15 VDDC_TPU (power), J4 VDDIO_SD0 (power), J6 VDDC (power), J14 VDDC_TPU (power), J15 VDDC_TPU (power), J17 VDDIO18_1 (power), K1 VIN3V (power), K3 VOUT_VO (power), L6 VDDC (power), L14 VDDC_TPU (power), L15 VDDC_TPU (power), L17 VDDIO18_1 (power), M4 VDDIO18_RM0 (power), M6 VDDC (power), M14 VDDC_TPU (power), M15 VDDC_TPU (power), N4 VDDC_RM0 (power), N7 VDDC (power), N8 VDDC (power), N12 VDDC (power), N13 VDDC (power), R6 VDDQ (power), R7 VDDQ (power), R9 VDDQ (power), R10 VDDQ (power), R13 VDDQ (power), R14 VDDQ (power), T18 VDDIO_RTC (power), T19 VDDC_RTC (power)
part J pins: A1 VSSC, A20 VSSA, C4 VSSA, C19 VSSA, D6 VSSA, D9 VSSA, D10 VSSA, D13 VSSA_AUD, E19 VSSA, F6 VSSC, F9 VSSC, F10 VSSC, F13 VSSC, G6 VSSC, G7 VSSC, G8 VSSC, G9 VSSC, G10 VSSC, G11 VSSC, G12 VSSC, G13 VSSC, G14 VSSC, G15 VSSC, H7 VSSC, H8 VSSC, H9 VSSC, H10 VSSC, H11 VSSC, H12 VSSC, H13 VSSC, J7 VSSC, J8 VSSC, J9 VSSC, J10 VSSC, J11 VSSC, J12 VSSC, J13 VSSC, K6 VSSC, K7 VSSC, K8 VSSC, K9 VSSC, K10 VSSC, K11 VSSC, K12 VSSC, K13 VSSC, K14 VSSC, K15 VSSC, L7 VSSC, L8 VSSC, L9 VSSC, L10 VSSC, L11 VSSC, L12 VSSC, L13 VSSC, M7 VSSC, M8 VSSC, M9 VSSC, M10 VSSC, M11 VSSC, M12 VSSC, M13 VSSC, M20 VSSC, N6 VSSC, N9 VSSC, N11 VSSC, N14 VSSC, N17 VSSC, R3 VSSC, R4 VSSC, R5 VSSC, R8 VSSC, R12 VSSC, R15 VSSC, R16 VSSC, T1 VSSC, T2 VSSC, T8 VSSC, T10 VSSC, T11 VSSC, T13 VSSC, T14 VSSC, T15 VSSC, T17 VSSC, V3 VSSC, V6 VSSC, V9 VSSC, V12 VSSC, V15 VSSC, Y1 VSSC, Y20 VSSC
part K pins: A15 AADC_AINR_MIC, A16 ADAC_AOUTL, B15 AADC_AINL_MIC, B16 ADAC_AOUTR, C15 ADAC_VREF_DA, D14 AADC_VREF_AD
part A text: MIU_internal

## C
designator C?, comment 0.1uF
ÌùÆ¬µçÈÝ CAP CER 0.1UF 16V 10% X7R 0402; Part Name: sC0402; Part Number: GRM155R61E104KA87D; Cloud IC Number: Y02110431K00; Vendor: murata; Value: 0.1uF
pins: 1, 2

## CAM_Holder
designator U?
pins: 1, 2

## CON2_0
designator J?
pins: 1, 1, 2, 2, 3, 4

## CON2_1
designator J?
pins: 1, 2, 3, 4

## CON2_1_1
designator J?
pins: 1, 2, 3, 4

## CON6_0
designator J?
pins: 1, 2, 3, 4, 5, 6, 7, 8, 9, 10, 11, 12, 13, 14, 15, 16, 17, 18

## CON6_1
designator J?
pins: 1, 2, 3, 4, 5, 6

## CON6_2
designator J?
pins: 1, 2, 3, 4, 5, 6, 7, 8, 9, 10

## CON6_2_1
designator J?
pins: 1, 2, 3, 4, 5, 6, 7

## CON6_3
designator J?
pins: 1, 2, 3, 4, 5, 6, 7, 8, 9, 10, 11, 12, 13, 14, 15, 16, 17, 18, 19, 20

## CON6_4
designator J?
pins: 1, 2, 3, 4, 5, 6, 7, 8, 9, 10, 11, 12, 13, 14, 15, 16, 17, 18, 19, 20, 21, 22

## CON6_5
designator J?
pins: 1, 2, 3 GND1, 4 GND2

## CON6_5_1
designator J?
pins: 1, 2, 3, 4, 5, 6, 7, 8

## CON6_6
designator J?
pins: 1, 2, 3, 4, 5, 6

## CON6_6_1
designator J?
pins: 1, 2, 3, 4, 5, 6

## CON12_0
designator J?
pins: 1, 2, 3, 4, 5, 6, 7, 8, 9, 10, 11, 12, 13, 14, 15, 16, 17, 18, 19, 20

## CON12_0_1
designator J?
pins: 1, 2, 3, 4, 5, 6, 7, 8, 9, 10, 11, 12, 13, 14, 15, 16, 17, 18, 19, 20

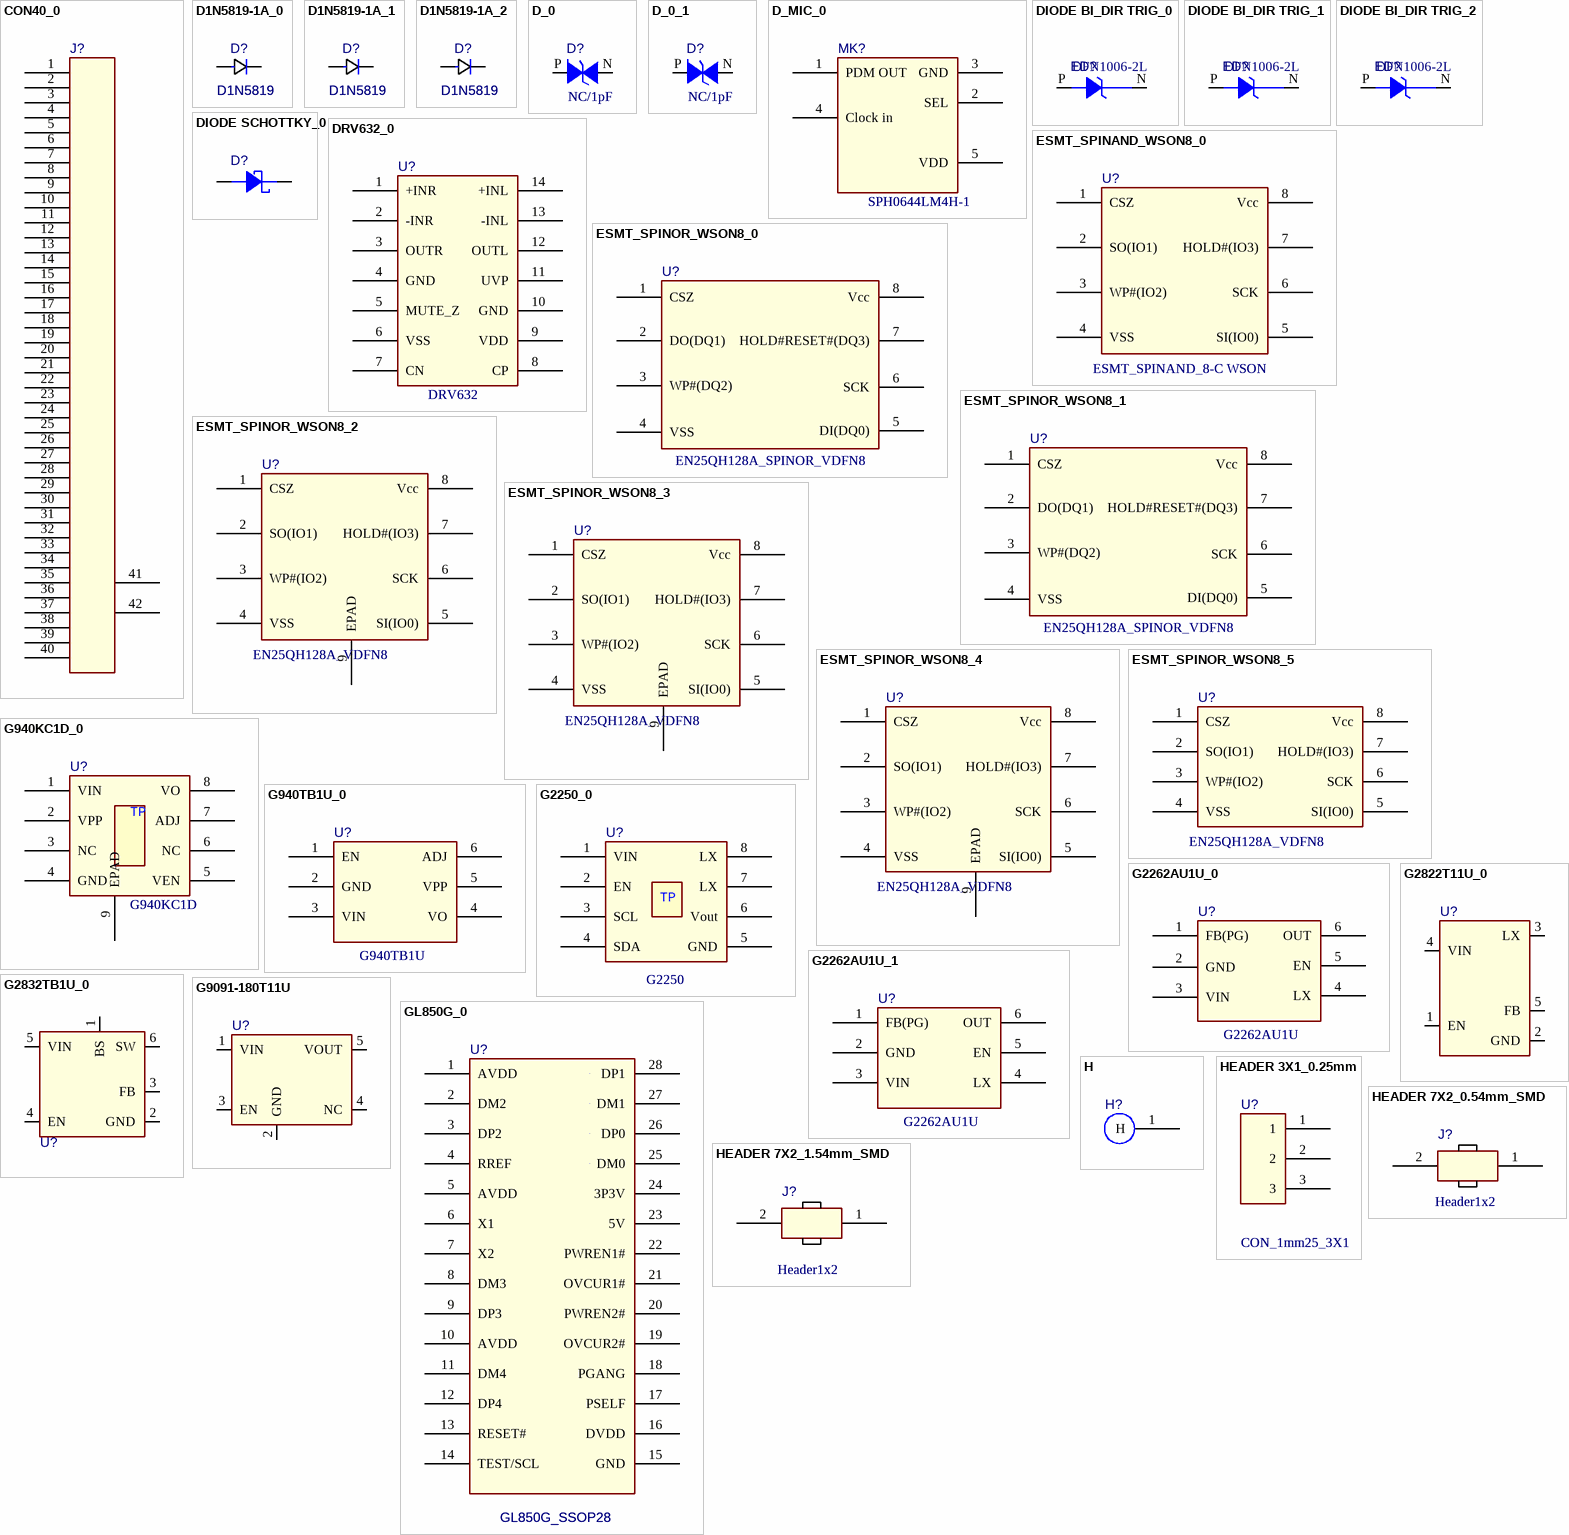
[diagram p40: symbols CON40_0 to HEADER 7X2_1.54mm_SMD]

## CON40_0
designator J?
pins: 1, 2, 3, 4, 5, 6, 7, 8, 9, 10, 11, 12, 13, 14, 15, 16, 17, 18, 19, 20, 21, 22, 23, 24, 25, 26, 27, 28, 29, 30, 31, 32, 33, 34, 35, 36, 37, 38, 39, 40, 41, 42

## D1N5819-1A_0
designator D?, comment D1N5819
¶þ¼«¹Ü,Schottky Barrier Diode,40V,1000mA,510mV,SOD-123,1N5819HW1,Diodes; Cloud IC Number: Y052N581903A; COMPONENT: 1N5819; PSpiceTemplate: D^@REFDES %1 %2 @MODEL ~AREA¦?AREA/@AREA/¦¦@AREA¦; Value: D1N5819
footprint DO-1N5819
simulation model D1N5819
pins: 1, 2

## D1N5819-1A_1
designator D?, comment D1N5819
¶þ¼«¹Ü,Schottky Barrier Diode,40V,1000mA,510mV,SOD-123,1N5819HW1,Diodes; Cloud IC Number: Y052N581903A; COMPONENT: 1N5819; PSpiceTemplate: D^@REFDES %1 %2 @MODEL ~AREA¦?AREA/@AREA/¦¦@AREA¦; Value: D1N5819
footprint DO-1N5819
simulation model D1N5819
pins: 1 P, 2 N

## D1N5819-1A_2
designator D?, comment D1N5819
¶þ¼«¹Ü,Schottky Barrier Diode,40V,1000mA,510mV,SOD-123,1N5819HW1,Diodes; Cloud IC Number: Y052N581903A; COMPONENT: 1N5819; PSpiceTemplate: D^@REFDES %1 %2 @MODEL ~AREA¦?AREA/@AREA/¦¦@AREA¦; Value: D1N5819
footprint DO-1N5819
simulation model D1N5819
pins: N, P

## D_0
designator D?, comment NC/1pF
Part Number: 025-0402ML2R5-000; Price: 0.07; Value: NC/1pF
pins: N, P

## D_0_1
designator D?, comment NC/1pF
Part Number: 025-0402ML2R5-000; Price: 0.07; Value: NC/1pF
pins: N, P

## D_MIC_0
designator MK?, comment SPH0644LM4H-1
Value: SPH0644LM4H-1
pins: 1 PDM OUT, 2 SEL, 3 GND, 4 Clock in, 5 VDD

## DIODE BI_DIR TRIG_0
designator ED?  PCB Footprint: DFN1006-2L
ÌùÆ¬TVS¶þ¼«¹Ü,ESD5311Z,¹¤×÷µçÑ¹5V,ESD±£»¤µçÑ¹¡À20KV,Cj=0.25pF,Ipp=4A,·â×°DFN0603-2L,WillSemi; Cloud IC Number: Y055D5311032
footprint DO-5311Z
pins: N Cathode, P Anode

## DIODE BI_DIR TRIG_1
designator ED?  PCB Footprint: DFN1006-2L
ÌùÆ¬TVS¶þ¼«¹Ü,ESD5311Z,¹¤×÷µçÑ¹5V,ESD±£»¤µçÑ¹¡À20KV,Cj=0.25pF,Ipp=4A,·â×°DFN0603-2L,WillSemi; Cloud IC Number: Y055D5311032
footprint DO-5311Z
pins: N 2, P 1

## DIODE BI_DIR TRIG_2
designator ED?  PCB Footprint: DFN1006-2L
pins: N 2, P 1

## DIODE SCHOTTKY_0
designator D?
pins: N, P

## DRV632_0
designator U?, comment DRV632
Value: DRV632
pins: 1 +INR, 2 -INR, 3 OUTR, 4 GND, 5 MUTE_Z, 6 VSS, 7 CN, 8 CP, 9 VDD, 10 GND, 11 UVP, 12 OUTL, 13 -INL, 14 +INL

## ESMT_SPINAND_WSON8_0
designator U?, comment ESMT_SPINAND_8-C WSON
NANE: SPINAND_WSON8; Value: ESMT_SPINAND_8-C WSON
footprint BGA4-0_5-0202-1X1
pins: 1 CSZ, 2 SO(IO1), 3 WP#(IO2), 4 VSS, 5 SI(IO0), 6 SCK, 7 HOLD#(IO3), 8 Vcc

## ESMT_SPINOR_WSON8_0
designator U?, comment EN25QH128A_SPINOR_VDFN8
ESMT_SPINOR_8-C WSON; NANE: SPINOR_WSON8; Value: EN25QH128A_SPINOR_VDFN8
footprint BGA4-0_5-0202-1X1
pins: 1 CSZ, 2 DO(DQ1), 3 WP#(DQ2), 4 VSS, 5 DI(DQ0), 6 SCK, 7 HOLD#RESET#(DQ3), 8 Vcc

## ESMT_SPINOR_WSON8_1
designator U?, comment EN25QH128A_SPINOR_VDFN8
ESMT_SPINOR_8-C WSON; NANE: SPINOR_WSON8; Value: EN25QH128A_SPINOR_VDFN8
footprint BGA4-0_5-0202-1X1
pins: 1 CSZ, 2 DO(DQ1), 3 WP#(DQ2), 4 VSS, 5 DI(DQ0), 6 SCK, 7 HOLD#RESET#(DQ3), 8 Vcc

## ESMT_SPINOR_WSON8_2
designator U?, comment EN25QH128A_VDFN8
ESMT_SPINOR_8-C WSON; NANE: SPINOR_WSON8; Value: EN25QH128A_VDFN8
footprint BGA4-0_5-0202-1X1
pins: 1 CSZ, 2 SO(IO1), 3 WP#(IO2), 4 VSS, 5 SI(IO0), 6 SCK, 7 HOLD#(IO3), 8 Vcc, 9 EPAD

## ESMT_SPINOR_WSON8_3
designator U?, comment EN25QH128A_VDFN8
ESMT_SPINOR_8-C WSON; NANE: SPINOR_WSON8; Value: EN25QH128A_VDFN8
footprint BGA4-0_5-0202-1X1
pins: 1 CSZ, 2 SO(IO1), 3 WP#(IO2), 4 VSS, 5 SI(IO0), 6 SCK, 7 HOLD#(IO3), 8 Vcc, 9 EPAD

## ESMT_SPINOR_WSON8_4
designator U?, comment EN25QH128A_VDFN8
ESMT_SPINOR_8-C WSON; NANE: SPINOR_WSON8; Value: EN25QH128A_VDFN8
footprint BGA4-0_5-0202-1X1
pins: 1 CSZ, 2 SO(IO1), 3 WP#(IO2), 4 VSS, 5 SI(IO0), 6 SCK, 7 HOLD#(IO3), 8 Vcc, 9 EPAD

## ESMT_SPINOR_WSON8_5
designator U?, comment EN25QH128A_VDFN8
ESMT_SPINOR_8-C WSON; NANE: SPINOR_WSON8; Value: EN25QH128A_VDFN8
footprint BGA4-0_5-0202-1X1
pins: 1 CSZ, 2 SO(IO1), 3 WP#(IO2), 4 VSS, 5 SI(IO0), 6 SCK, 7 HOLD#(IO3), 8 Vcc

## G940KC1D_0
designator U?, comment G940KC1D
Value: G940KC1D
pins: 1 VIN, 2 VPP, 3 NC, 4 GND, 5 VEN, 6 NC, 7 ADJ, 8 VO, 9 EPAD
text: TP

## G940TB1U_0
designator U?, comment G940TB1U
Value: G940TB1U
pins: 1 EN, 2 GND, 3 VIN, 4 VO, 5 VPP, 6 ADJ

## G2250_0
designator U?, comment G2250
Value: G2250
pins: 1 VIN, 2 EN, 3 SCL, 4 SDA, 5 GND, 6 Vout, 7 LX, 8 LX
text: TP

## G2262AU1U_0
designator U?, comment G2262AU1U
Value: G2262AU1U
pins: 1 FB(PG), 2 GND, 3 VIN, 4 LX, 5 EN, 6 OUT

## G2262AU1U_1
designator U?, comment G2262AU1U
Value: G2262AU1U
pins: 1 FB(PG), 2 GND, 3 VIN, 4 LX, 5 EN, 6 OUT

## G2822T11U_0
designator U?
pins: 1 EN, 2 GND, 3 LX, 4 VIN, 5 FB

## G2832TB1U_0
designator U?
pins: 1 BS, 2 GND, 3 FB, 4 EN, 5 VIN, 6 SW

## G9091-180T11U
designator U?
pins: 1 VIN, 2 GND, 3 EN, 4 NC, 5 VOUT

## GL850G_0
designator U?, comment GL850G_SSOP28
IC,TPS2553DRV,Current-Limited Switch£¬75mA-1.3A,+/-6%, 15KV,DFN6; PARTS: 1; OriginalSymbolOrigin: (10,90); LEVEL: STD; DEVICE: TPS2551DRVR; Cloud IC Number: Y090PS255316; Value: GL850G_SSOP28
footprint MLF6-065-0202L
pins: 1 AVDD, 2 DM2, 3 DP2, 4 RREF, 5 AVDD, 6 X1, 7 X2, 8 DM3, 9 DP3, 10 AVDD, 11 DM4, 12 DP4, 13 RESET#, 14 TEST/SCL, 15 GND, 16 DVDD, 17 PSELF, 18 PGANG, 19 OVCUR2#, 20 PWREN2#, 21 OVCUR1#, 22 PWREN1#, 23 5V, 24 3P3V, 25 DM0, 26 DP0, 27 DM1, 28 DP1

## H
designator H?
footprint M3_5.5X7.0_3.5
pins: 1 H

## HEADER 3X1_0.25mm
designator U?, comment CON_1mm25_3X1
²å¼þ¶Ë×Ó×ù£¬2PIN£¨1*2PIN£©£¬1.25mm£¬¹æ¸ñ£º4.4*3.3mm£¬Á¢Ê½; Part Number: CON_2p54_2X1; Vendor: oupiin; Cloud IC Number: Y04C10202105; Value: CON_1mm25_3X1
pins: 1, 2, 3

## HEADER 7X2_0.54mm_SMD
designator J?, comment Header1x2
ÌùÆ¬Á¬½ÓÆ÷,ÅÅÕë,14PIN(2*7PIN),2.54mm,Á¢Ê½£¬P6E14F-453275-B11Y,CHIN-BAN; Cloud IC Number: Y04620706105; Value: Header1x2
footprint SJP0207-2_54-ST-H5
pins: 1, 2

## HEADER 7X2_1.54mm_SMD
designator J?, comment Header1x2
ÌùÆ¬Á¬½ÓÆ÷,ÅÅÕë,14PIN(2*7PIN),2.54mm,Á¢Ê½£¬P6E14F-453275-B11Y,CHIN-BAN; Cloud IC Number: Y04620706105; Value: Header1x2
footprint SJP0207-2_54-ST-H5
pins: 1, 2

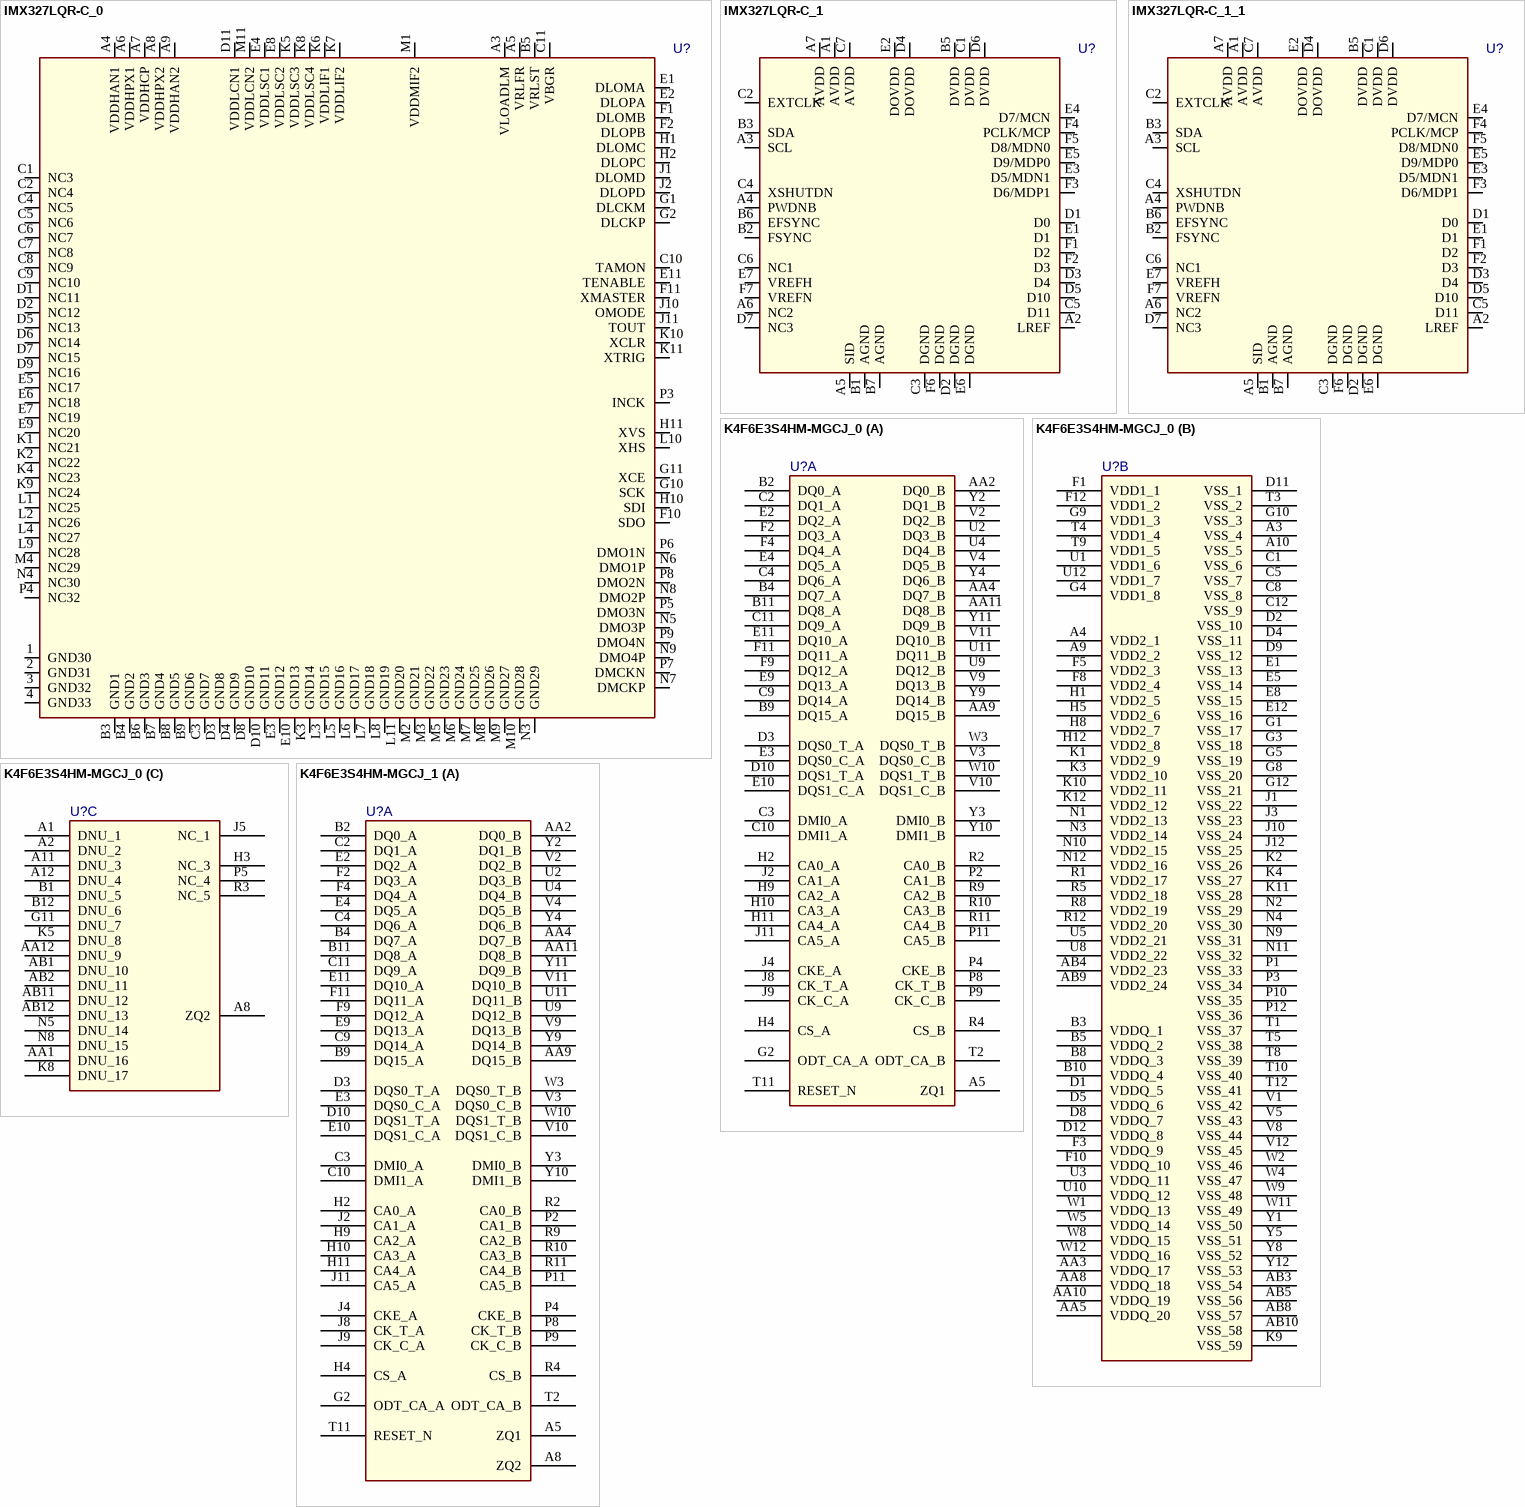
[diagram p41: symbols IMX327LQR-C_0 to K4F6E3S4HM-MGCJ_1]

## IMX327LQR-C_0
designator U?
pins: 1 GND30, 2 GND31, 3 GND32, 4 GND33, A3 VLOADLM, A4 VDDHAN1, A5 VRLFR, A6 VDDHPX1, A7 VDDHCP, A8 VDDHPX2, A9 VDDHAN2, B3 GND1, B4 GND2, B5 VRLST, B6 GND3, B7 GND4, B8 GND5, B9 GND6, C1 NC3, C2 NC4, C3 GND7, C4 NC5, C5 NC6, C6 NC7, C7 NC8, C8 NC9, C9 NC10, C10 TAMON, C11 VBGR, D1 NC11, D2 NC12, D3 GND8, D4 GND9, D5 NC13, D6 NC14, D7 NC15, D8 GND10, D9 NC16, D10 GND11, D11 VDDLCN1, E1 DLOMA, E2 DLOPA, E3 GND12, E4 VDDLSC1, E5 NC17, E6 NC18, E7 NC19, E8 VDDLSC2, E9 NC20, E10 GND13, E11 TENABLE, F1 DLOMB, F2 DLOPB, F10 SDO, F11 XMASTER, G1 DLCKM, G2 DLCKP, G10 SCK, G11 XCE, H1 DLOMC, H2 DLOPC, H10 SDI, H11 XVS, J1 DLOMD, J2 DLOPD, J10 OMODE, J11 TOUT, K1 NC21, K2 NC22, K3 GND14, K4 NC23, K5 VDDLSC3, K6 VDDLIF1, K7 VDDLIF2, K8 VDDLSC4, K9 NC24, K10 XCLR, K11 XTRIG, L1 NC25, L2 NC26, L3 GND15, L4 NC27, L5 GND16, L6 GND17, L7 GND18, L8 GND19, L9 NC28, L10 XHS, L11 GND20, M1 VDDMIF2, M2 GND21, M3 GND22, M4 NC29, M5 GND23, M6 GND24, M7 GND25, M8 GND26, M9 GND27, M10 GND28, M11 VDDLCN2, N3 GND29, N4 NC30, N5 DMO3P, N6 DMO1P, N7 DMCKP, N8 DMO2P, N9 DMO4P, P3 INCK, P4 NC32, P5 DMO3N, P6 DMO1N, P7 DMCKN, P8 DMO2N, P9 DMO4N

## IMX327LQR-C_1
designator U?
pins: A1 AVDD (power), A2 LREF, A3 SCL, A4 PWDNB, A5 SID, A6 NC2, A7 AVDD (power), B1 AGND (power), B2 FSYNC, B3 SDA, B5 DVDD (power), B6 EFSYNC, B7 AGND (power), C1 DVDD (power), C2 EXTCLK, C3 DGND (power), C4 XSHUTDN, C5 D11, C6 NC1, C7 AVDD (power), D1 D0, D2 DGND (power), D3 D4, D4 DOVDD (power), D5 D10, D6 DVDD (power), D7 NC3, E1 D1, E2 DOVDD (power), E3 D5/MDN1, E4 D7/MCN, E5 D9/MDP0, E6 DGND (power), E7 VREFH, F1 D2, F2 D3, F3 D6/MDP1, F4 PCLK/MCP, F5 D8/MDN0, F6 DGND (power), F7 VREFN

## IMX327LQR-C_1_1
designator U?
pins: A1 AVDD (power), A2 LREF, A3 SCL, A4 PWDNB, A5 SID, A6 NC2, A7 AVDD (power), B1 AGND (power), B2 FSYNC, B3 SDA, B5 DVDD (power), B6 EFSYNC, B7 AGND (power), C1 DVDD (power), C2 EXTCLK, C3 DGND (power), C4 XSHUTDN, C5 D11, C6 NC1, C7 AVDD (power), D1 D0, D2 DGND (power), D3 D4, D4 DOVDD (power), D5 D10, D6 DVDD (power), D7 NC3, E1 D1, E2 DOVDD (power), E3 D5/MDN1, E4 D7/MCN, E5 D9/MDP0, E6 DGND (power), E7 VREFH, F1 D2, F2 D3, F3 D6/MDP1, F4 PCLK/MCP, F5 D8/MDN0, F6 DGND (power), F7 VREFN

## K4F6E3S4HM-MGCJ_0
designator U?
SWAP_INFO: (S1+S2+S3); SPLIT_INST: TRUE
part A pins: A5 ZQ1, AA2 DQ0_B, AA4 DQ7_B, AA9 DQ15_B, AA11 DQ8_B, B2 DQ0_A, B4 DQ7_A, B9 DQ15_A, B11 DQ8_A, C2 DQ1_A, C3 DMI0_A, C4 DQ6_A, C9 DQ14_A, C10 DMI1_A, C11 DQ9_A, D3 DQS0_T_A, D10 DQS1_T_A, E2 DQ2_A, E3 DQS0_C_A, E4 DQ5_A, E9 DQ13_A, E10 DQS1_C_A, E11 DQ10_A, F2 DQ3_A, F4 DQ4_A, F9 DQ12_A, F11 DQ11_A, G2 ODT_CA_A, H2 CA0_A, H4 CS_A, H9 CA2_A, H10 CA3_A, H11 CA4_A, J2 CA1_A, J4 CKE_A, J8 CK_T_A, J9 CK_C_A, J11 CA5_A, P2 CA1_B, P4 CKE_B, P8 CK_T_B, P9 CK_C_B, P11 CA5_B, R2 CA0_B, R4 CS_B, R9 CA2_B, R10 CA3_B, R11 CA4_B, T2 ODT_CA_B, T11 RESET_N, U2 DQ3_B, U4 DQ4_B, U9 DQ12_B, U11 DQ11_B, V2 DQ2_B, V3 DQS0_C_B, V4 DQ5_B, V9 DQ13_B, V10 DQS1_C_B, V11 DQ10_B, W3 DQS0_T_B, W10 DQS1_T_B, Y2 DQ1_B, Y3 DMI0_B, Y4 DQ6_B, Y9 DQ14_B, Y10 DMI1_B, Y11 DQ9_B
part B pins: A3 VSS_4, A4 VDD2_1, A9 VDD2_2, A10 VSS_5, AA3 VDDQ_17, AA5 VDDQ_20, AA8 VDDQ_18, AA10 VDDQ_19, AB3 VSS_54, AB4 VDD2_23, AB5 VSS_56, AB8 VSS_57, AB9 VDD2_24, AB10 VSS_58, B3 VDDQ_1, B5 VDDQ_2, B8 VDDQ_3, B10 VDDQ_4, C1 VSS_6, C5 VSS_7, C8 VSS_8, C12 VSS_9, D1 VDDQ_5, D2 VSS_10, D4 VSS_11, D5 VDDQ_6, D8 VDDQ_7, D9 VSS_12, D11 VSS_1, D12 VDDQ_8, E1 VSS_13, E5 VSS_14, E8 VSS_15, E12 VSS_16, F1 VDD1_1, F3 VDDQ_9, F5 VDD2_3, F8 VDD2_4, F10 VDDQ_10, F12 VDD1_2, G1 VSS_17, G3 VSS_18, G4 VDD1_8, G5 VSS_19, G8 VSS_20, G9 VDD1_3, G10 VSS_3, G12 VSS_21, H1 VDD2_5, H5 VDD2_6, H8 VDD2_7, H12 VDD2_8, J1 VSS_22, J3 VSS_23, J10 VSS_24, J12 VSS_25, K1 VDD2_9, K2 VSS_26, K3 VDD2_10, K4 VSS_27, K9 VSS_59, K10 VDD2_11, K11 VSS_28, K12 VDD2_12, N1 VDD2_13, N2 VSS_29, N3 VDD2_14, N4 VSS_30, N9 VSS_31, N10 VDD2_15, N11 VSS_32, N12 VDD2_16, P1 VSS_33, P3 VSS_34, P10 VSS_35, P12 VSS_36, R1 VDD2_17, R5 VDD2_18, R8 VDD2_19, R12 VDD2_20, T1 VSS_37, T3 VSS_2, T4 VDD1_4, T5 VSS_38, T8 VSS_39, T9 VDD1_5, T10 VSS_40, T12 VSS_41, U1 VDD1_6, U3 VDDQ_11, U5 VDD2_21, U8 VDD2_22, U10 VDDQ_12, U12 VDD1_7, V1 VSS_42, V5 VSS_43, V8 VSS_44, V12 VSS_45, W1 VDDQ_13, W2 VSS_46, W4 VSS_47, W5 VDDQ_14, W8 VDDQ_15, W9 VSS_48, W11 VSS_49, W12 VDDQ_16, Y1 VSS_50, Y5 VSS_51, Y8 VSS_52, Y12 VSS_53
part C pins: A1 DNU_1, A2 DNU_2, A8 ZQ2, A11 DNU_3, A12 DNU_4, AA1 DNU_16, AA12 DNU_9, AB1 DNU_10, AB2 DNU_11, AB11 DNU_12, AB12 DNU_13, B1 DNU_5, B12 DNU_6, G11 DNU_7, H3 NC_3, J5 NC_1, K5 DNU_8, K8 DNU_17, N5 DNU_14, N8 DNU_15, P5 NC_4, R3 NC_5

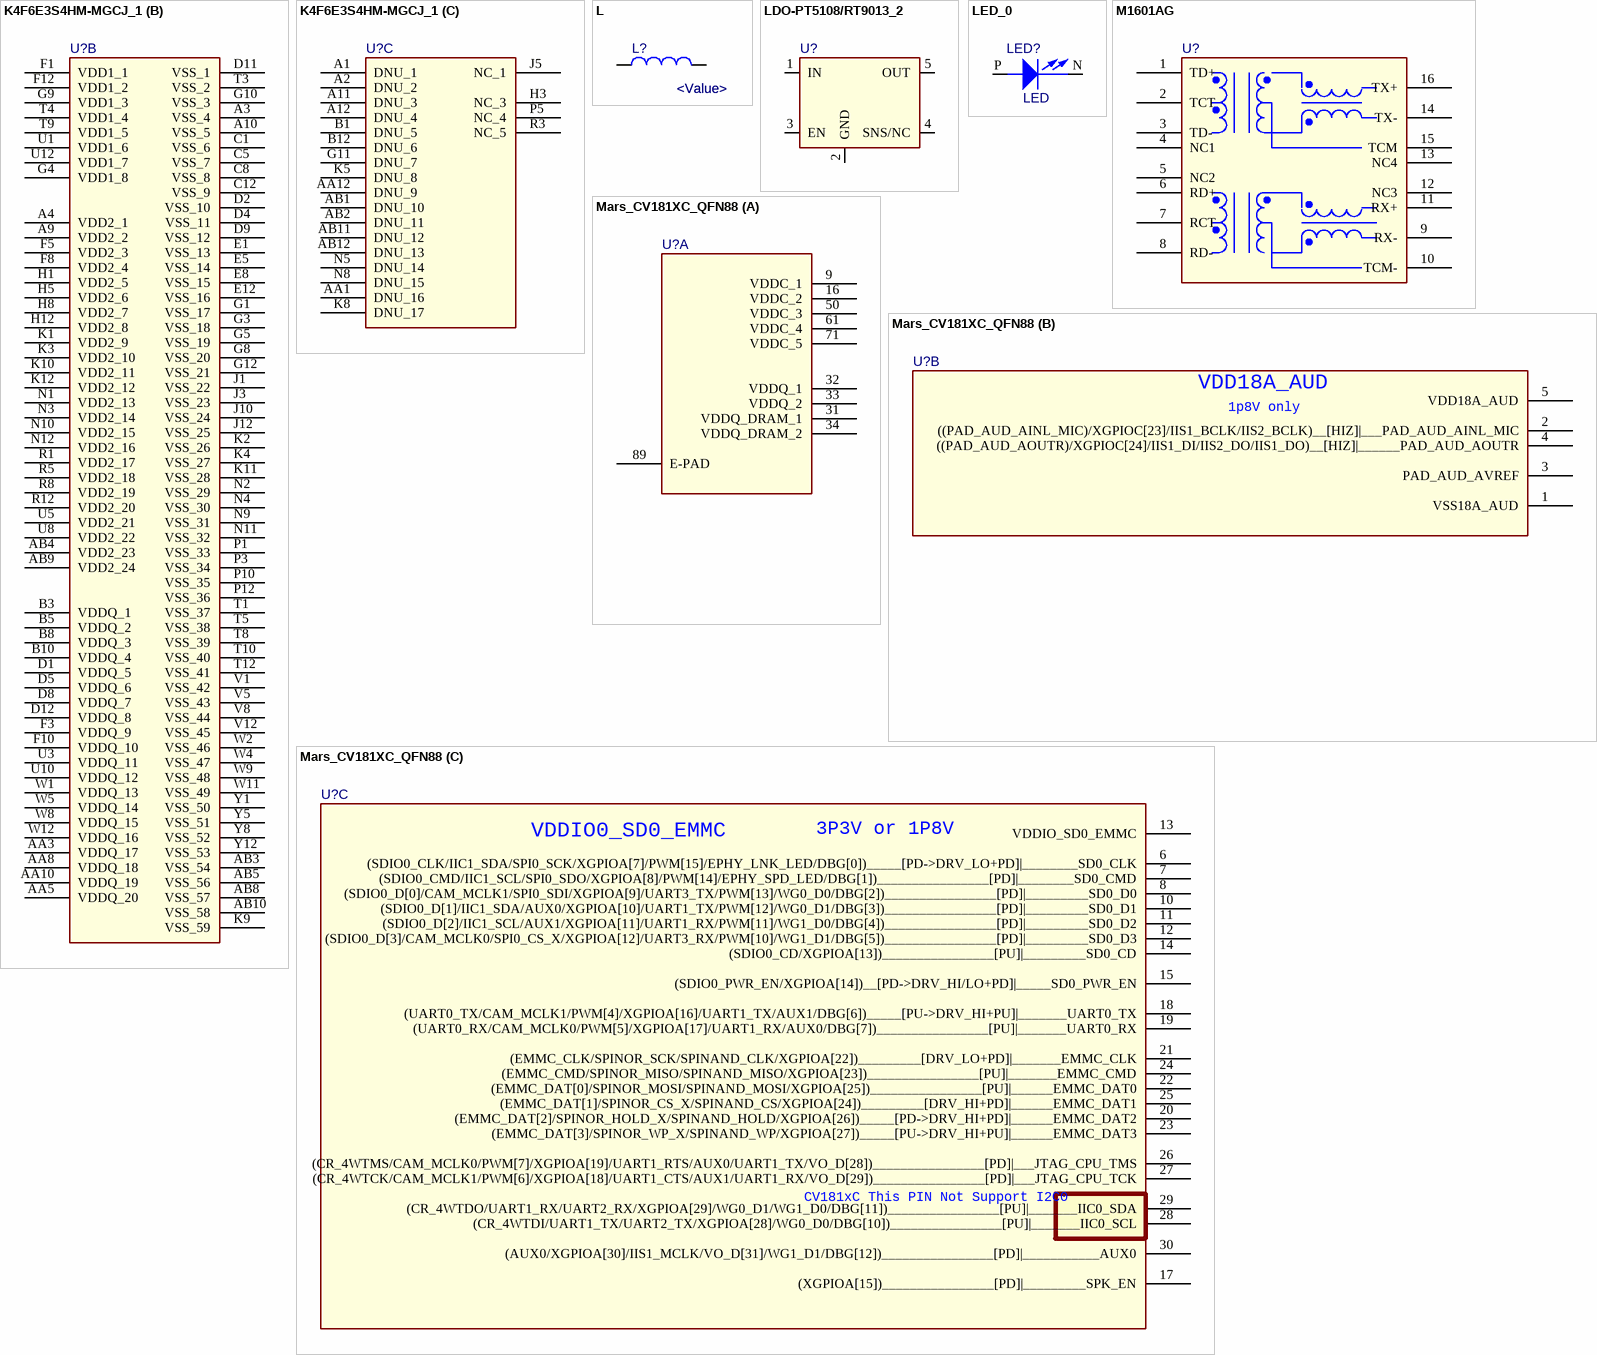
[diagram p42: symbols K4F6E3S4HM-MGCJ_1 to Mars_CV181XC_QFN88]

## K4F6E3S4HM-MGCJ_1
designator U?
SPLIT_INST: TRUE; SWAP_INFO: (S1+S2+S3)
part A pins: A5 ZQ1, A8 ZQ2, AA2 DQ0_B, AA4 DQ7_B, AA9 DQ15_B, AA11 DQ8_B, B2 DQ0_A, B4 DQ7_A, B9 DQ15_A, B11 DQ8_A, C2 DQ1_A, C3 DMI0_A, C4 DQ6_A, C9 DQ14_A, C10 DMI1_A, C11 DQ9_A, D3 DQS0_T_A, D10 DQS1_T_A, E2 DQ2_A, E3 DQS0_C_A, E4 DQ5_A, E9 DQ13_A, E10 DQS1_C_A, E11 DQ10_A, F2 DQ3_A, F4 DQ4_A, F9 DQ12_A, F11 DQ11_A, G2 ODT_CA_A, H2 CA0_A, H4 CS_A, H9 CA2_A, H10 CA3_A, H11 CA4_A, J2 CA1_A, J4 CKE_A, J8 CK_T_A, J9 CK_C_A, J11 CA5_A, P2 CA1_B, P4 CKE_B, P8 CK_T_B, P9 CK_C_B, P11 CA5_B, R2 CA0_B, R4 CS_B, R9 CA2_B, R10 CA3_B, R11 CA4_B, T2 ODT_CA_B, T11 RESET_N, U2 DQ3_B, U4 DQ4_B, U9 DQ12_B, U11 DQ11_B, V2 DQ2_B, V3 DQS0_C_B, V4 DQ5_B, V9 DQ13_B, V10 DQS1_C_B, V11 DQ10_B, W3 DQS0_T_B, W10 DQS1_T_B, Y2 DQ1_B, Y3 DMI0_B, Y4 DQ6_B, Y9 DQ14_B, Y10 DMI1_B, Y11 DQ9_B
part B pins: A3 VSS_4, A4 VDD2_1, A9 VDD2_2, A10 VSS_5, AA3 VDDQ_17, AA5 VDDQ_20, AA8 VDDQ_18, AA10 VDDQ_19, AB3 VSS_54, AB4 VDD2_23, AB5 VSS_56, AB8 VSS_57, AB9 VDD2_24, AB10 VSS_58, B3 VDDQ_1, B5 VDDQ_2, B8 VDDQ_3, B10 VDDQ_4, C1 VSS_6, C5 VSS_7, C8 VSS_8, C12 VSS_9, D1 VDDQ_5, D2 VSS_10, D4 VSS_11, D5 VDDQ_6, D8 VDDQ_7, D9 VSS_12, D11 VSS_1, D12 VDDQ_8, E1 VSS_13, E5 VSS_14, E8 VSS_15, E12 VSS_16, F1 VDD1_1, F3 VDDQ_9, F5 VDD2_3, F8 VDD2_4, F10 VDDQ_10, F12 VDD1_2, G1 VSS_17, G3 VSS_18, G4 VDD1_8, G5 VSS_19, G8 VSS_20, G9 VDD1_3, G10 VSS_3, G12 VSS_21, H1 VDD2_5, H5 VDD2_6, H8 VDD2_7, H12 VDD2_8, J1 VSS_22, J3 VSS_23, J10 VSS_24, J12 VSS_25, K1 VDD2_9, K2 VSS_26, K3 VDD2_10, K4 VSS_27, K9 VSS_59, K10 VDD2_11, K11 VSS_28, K12 VDD2_12, N1 VDD2_13, N2 VSS_29, N3 VDD2_14, N4 VSS_30, N9 VSS_31, N10 VDD2_15, N11 VSS_32, N12 VDD2_16, P1 VSS_33, P3 VSS_34, P10 VSS_35, P12 VSS_36, R1 VDD2_17, R5 VDD2_18, R8 VDD2_19, R12 VDD2_20, T1 VSS_37, T3 VSS_2, T4 VDD1_4, T5 VSS_38, T8 VSS_39, T9 VDD1_5, T10 VSS_40, T12 VSS_41, U1 VDD1_6, U3 VDDQ_11, U5 VDD2_21, U8 VDD2_22, U10 VDDQ_12, U12 VDD1_7, V1 VSS_42, V5 VSS_43, V8 VSS_44, V12 VSS_45, W1 VDDQ_13, W2 VSS_46, W4 VSS_47, W5 VDDQ_14, W8 VDDQ_15, W9 VSS_48, W11 VSS_49, W12 VDDQ_16, Y1 VSS_50, Y5 VSS_51, Y8 VSS_52, Y12 VSS_53
part C pins: A1 DNU_1, A2 DNU_2, A11 DNU_3, A12 DNU_4, AA1 DNU_16, AA12 DNU_9, AB1 DNU_10, AB2 DNU_11, AB11 DNU_12, AB12 DNU_13, B1 DNU_5, B12 DNU_6, G11 DNU_7, H3 NC_3, J5 NC_1, K5 DNU_8, K8 DNU_17, N5 DNU_14, N8 DNU_15, P5 NC_4, R3 NC_5

## L
designator L?, comment <Value>
DIST: FLAT; PSpiceTemplate: L^@REFDES %1 %2 ?TOLERANCE|L^@REFDES| @VALUE ?IC/IC=@IC/ ?TOLERANCE|\n.model l^@REFDES IND L=1 DEV=@TOLERANCE%|; CURRENT: LMAX; DIELECTRIC: DSMAX; Value: <Value>
footprint DISC/.350x.175/LS.200x.100/.034
simulation model L
pins: 1, 2

## LDO-PT5108/RT9013_2
designator U?
pins: 1 IN, 2 GND, 3 EN, 4 SNS/NC, 5 OUT

## LED_0
designator LED?, comment LED
Value1: LED; Part Type: DIP; Value: LED
pins: N CATHODE, P ANODE

## M1601AG
designator U?
footprint TF16_12D1X5D1_1D27
pins: 1 TD+, 2 TCT, 3 TD-, 4 NC1, 5 NC2, 6 RD+, 7 RCT, 8 RD-, 9 RX-, 10 TCM-, 11 RX+, 12 NC3, 13 NC4, 14 TX-, 15 TCM, 16 TX+

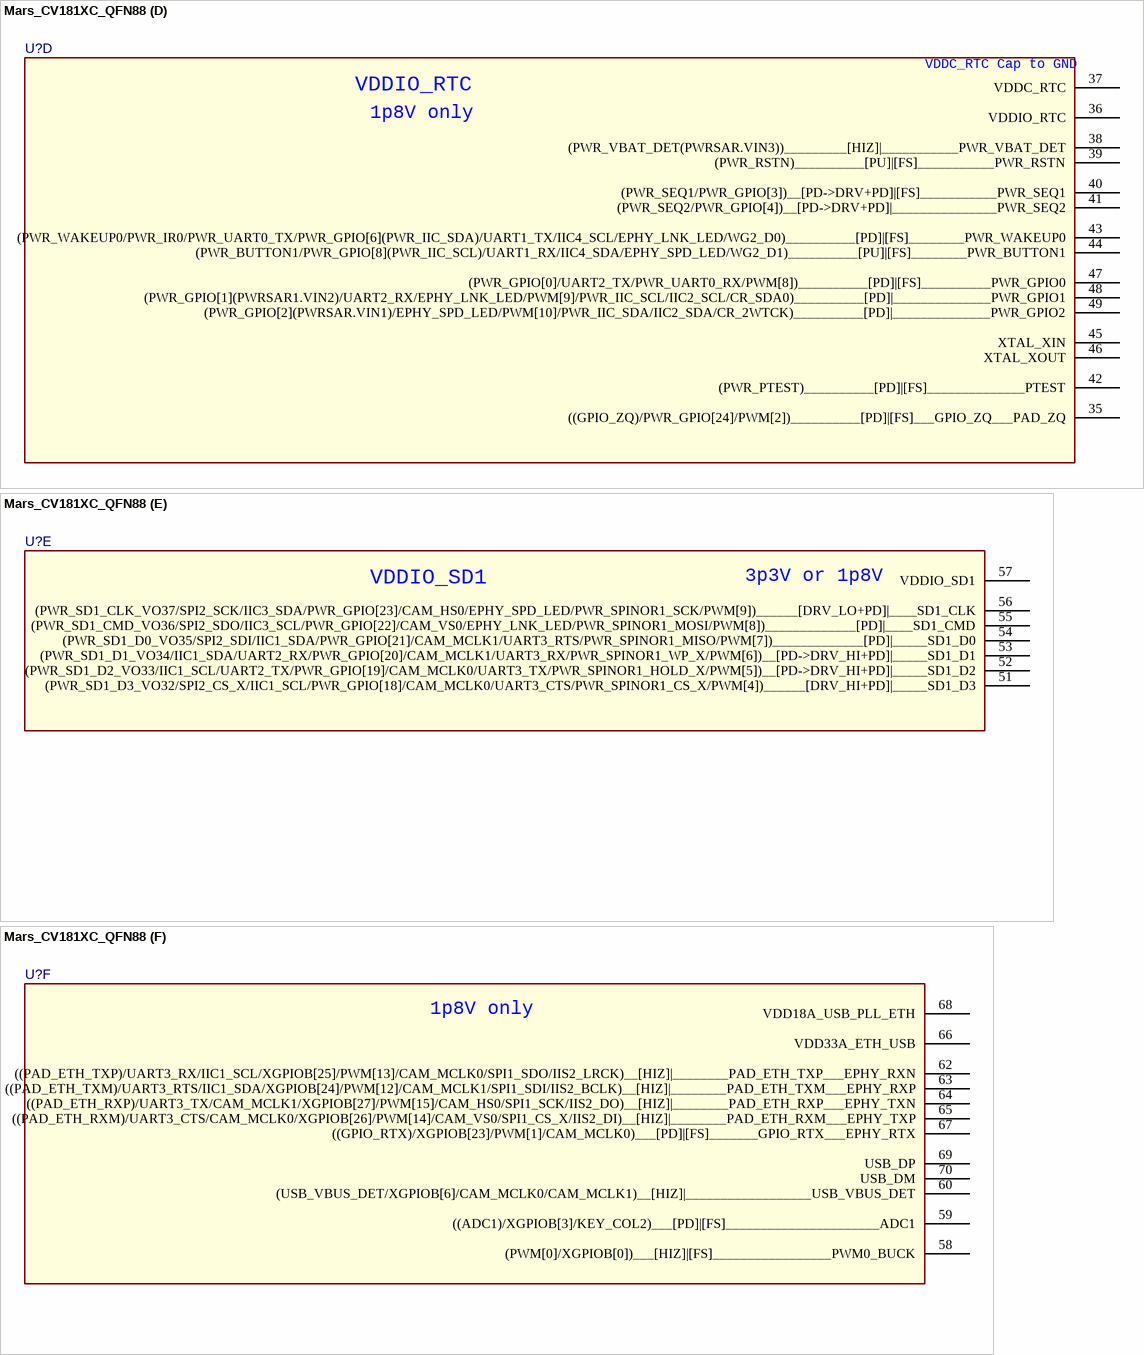
[diagram p43: symbol Mars_CV181XC_QFN88]

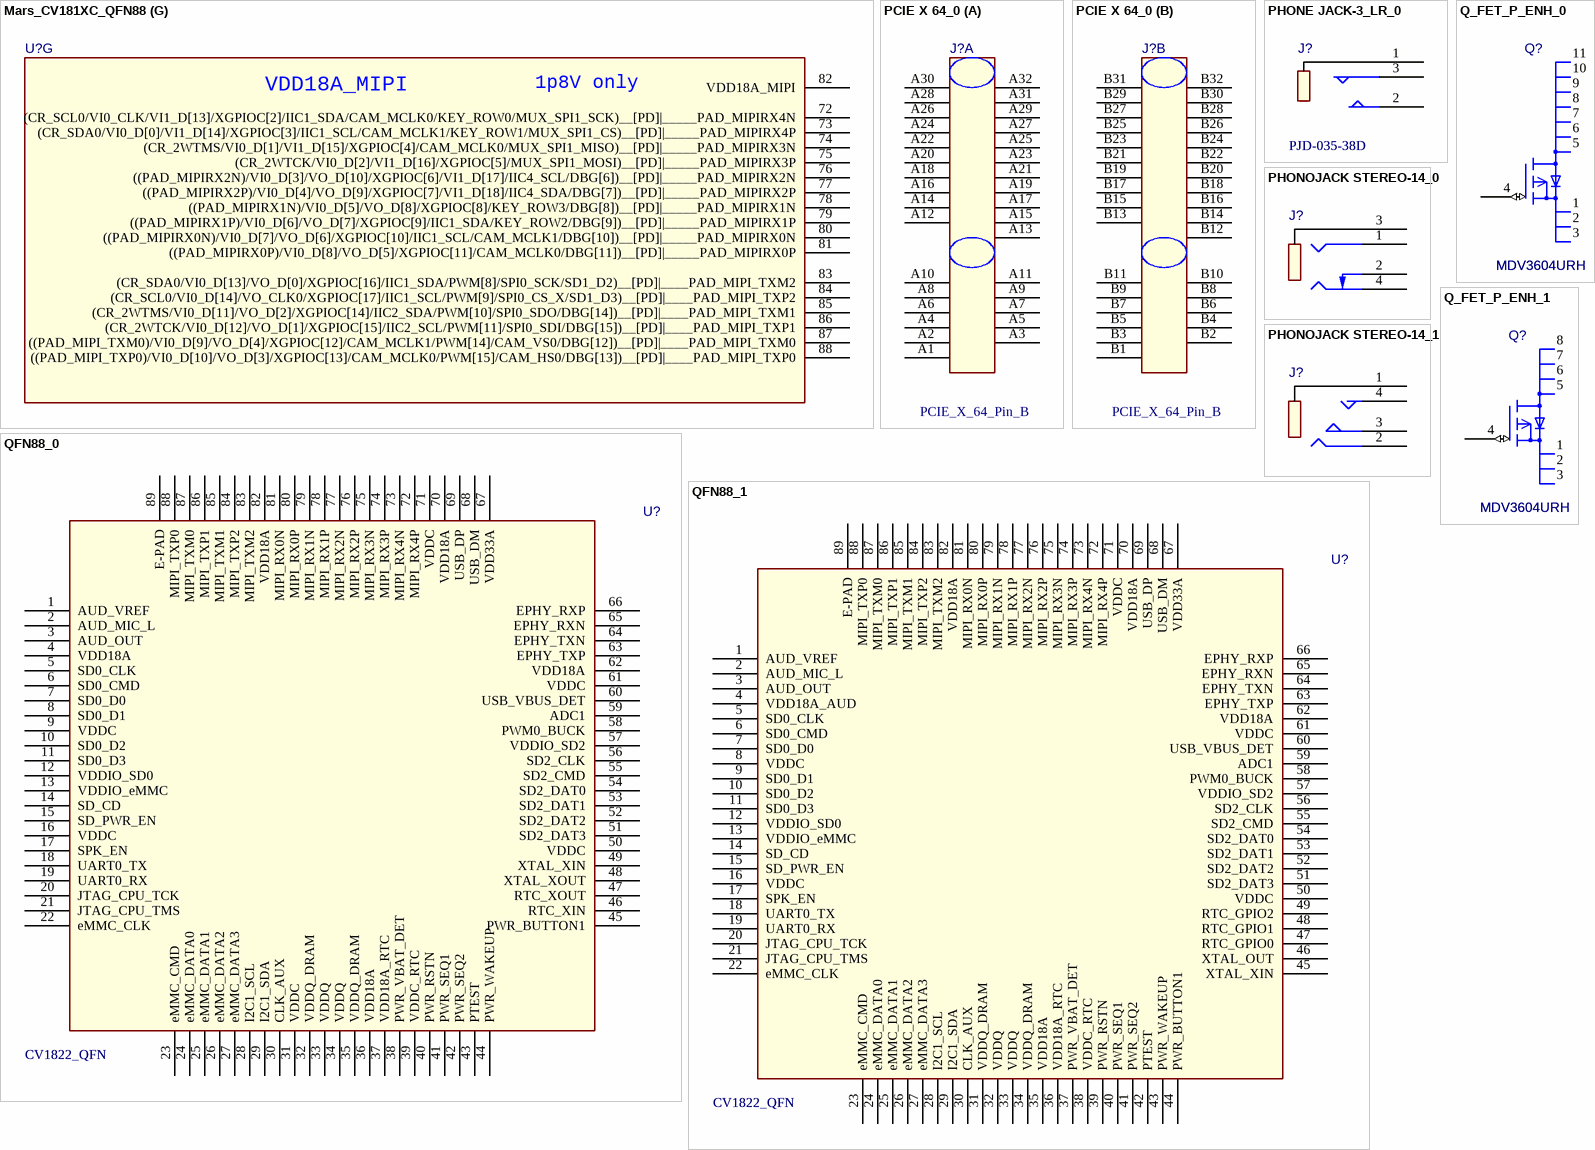
[diagram p44: symbols Mars_CV181XC_QFN88 to QFN88_1]

## Mars_CV181XC_QFN88
designator U?
SWAP_INFO: (S1+S2+S3+S4+S5+S6+S7); SPLIT_INST: TRUE
part A pins: 9 VDDC_1 (power), 16 VDDC_2 (power), 31 VDDQ_DRAM_1 (power), 32 VDDQ_1 (power), 33 VDDQ_2 (power), 34 VDDQ_DRAM_2 (power), 50 VDDC_3 (power), 61 VDDC_4 (power), 71 VDDC_5 (power), 89 E-PAD (power)
part B pins: 1 VSS18A_AUD, 2 ((PAD_AUD_AINL_MIC)/XGPIOC[23]/IIS1_BCLK/IIS2_BCLK)__[HIZ]|___PAD_AUD_AINL_MIC, 3 PAD_AUD_AVREF, 4 ((PAD_AUD_AOUTR)/XGPIOC[24]/IIS1_DI/IIS2_DO/IIS1_DO)__[HIZ]|______PAD_AUD_AOUTR, 5 VDD18A_AUD (power)
part C pins: 6 (SDIO0_CLK/IIC1_SDA/SPI0_SCK/XGPIOA[7]/PWM[15]/EPHY_LNK_LED/DBG[0])_____[PD->DRV_LO+PD]|________SD0_CLK, 7 (SDIO0_CMD/IIC1_SCL/SPI0_SDO/XGPIOA[8]/PWM[14]/EPHY_SPD_LED/DBG[1])________________[PD]|________SD0_CMD, 8 (SDIO0_D[0]/CAM_MCLK1/SPI0_SDI/XGPIOA[9]/UART3_TX/PWM[13]/WG0_D0/DBG[2])________________[PD]|_________SD0_D0, 10 (SDIO0_D[1]/IIC1_SDA/AUX0/XGPIOA[10]/UART1_TX/PWM[12]/WG0_D1/DBG[3])________________[PD]|_________SD0_D1, 11 (SDIO0_D[2]/IIC1_SCL/AUX1/XGPIOA[11]/UART1_RX/PWM[11]/WG1_D0/DBG[4])________________[PD]|_________SD0_D2, 12 (SDIO0_D[3]/CAM_MCLK0/SPI0_CS_X/XGPIOA[12]/UART3_RX/PWM[10]/WG1_D1/DBG[5])________________[PD]|_________SD0_D3, 13 VDDIO_SD0_EMMC (power), 14 (SDIO0_CD/XGPIOA[13])________________[PU]|_________SD0_CD, 15 (SDIO0_PWR_EN/XGPIOA[14])__[PD->DRV_HI/LO+PD]|_____SD0_PWR_EN, 17 (XGPIOA[15])________________[PD]|_________SPK_EN, 18 (UART0_TX/CAM_MCLK1/PWM[4]/XGPIOA[16]/UART1_TX/AUX1/DBG[6])_____[PU->DRV_HI+PU]|_______UART0_TX, 19 (UART0_RX/CAM_MCLK0/PWM[5]/XGPIOA[17]/UART1_RX/AUX0/DBG[7])________________[PU]|_______UART0_RX, 20 (EMMC_DAT[2]/SPINOR_HOLD_X/SPINAND_HOLD/XGPIOA[26])_____[PD->DRV_HI+PD]|______EMMC_DAT2, 21 (EMMC_CLK/SPINOR_SCK/SPINAND_CLK/XGPIOA[22])_________[DRV_LO+PD]|_______EMMC_CLK, 22 (EMMC_DAT[0]/SPINOR_MOSI/SPINAND_MOSI/XGPIOA[25])________________[PU]|______EMMC_DAT0, 23 (EMMC_DAT[3]/SPINOR_WP_X/SPINAND_WP/XGPIOA[27])_____[PU->DRV_HI+PU]|______EMMC_DAT3, 24 (EMMC_CMD/SPINOR_MISO/SPINAND_MISO/XGPIOA[23])________________[PU]|_______EMMC_CMD, 25 (EMMC_DAT[1]/SPINOR_CS_X/SPINAND_CS/XGPIOA[24])_________[DRV_HI+PD]|______EMMC_DAT1, 26 (CR_4WTMS/CAM_MCLK0/PWM[7]/XGPIOA[19]/UART1_RTS/AUX0/UART1_TX/VO_D[28])________________[PD]|___JTAG_CPU_TMS, 27 (CR_4WTCK/CAM_MCLK1/PWM[6]/XGPIOA[18]/UART1_CTS/AUX1/UART1_RX/VO_D[29])________________[PD]|___JTAG_CPU_TCK, 28 (CR_4WTDI/UART1_TX/UART2_TX/XGPIOA[28]/WG0_D0/DBG[10])________________[PU]|_______IIC0_SCL, 29 (CR_4WTDO/UART1_RX/UART2_RX/XGPIOA[29]/WG0_D1/WG1_D0/DBG[11])________________[PU]|_______IIC0_SDA, 30 (AUX0/XGPIOA[30]/IIS1_MCLK/VO_D[31]/WG1_D1/DBG[12])________________[PD]|___________AUX0
part D pins: 35 ((GPIO_ZQ)/PWR_GPIO[24]/PWM[2])__________[PD]|[FS]___GPIO_ZQ___PAD_ZQ, 36 VDDIO_RTC (power), 37 VDDC_RTC (power), 38 (PWR_VBAT_DET(PWRSAR.VIN3))_________[HIZ]|___________PWR_VBAT_DET, 39 (PWR_RSTN)__________[PU]|[FS]___________PWR_RSTN, 40 (PWR_SEQ1/PWR_GPIO[3])__[PD->DRV+PD]|[FS]___________PWR_SEQ1, 41 (PWR_SEQ2/PWR_GPIO[4])__[PD->DRV+PD]|_______________PWR_SEQ2, 42 (PWR_PTEST)__________[PD]|[FS]______________PTEST, 43 (PWR_WAKEUP0/PWR_IR0/PWR_UART0_TX/PWR_GPIO[6](PWR_IIC_SDA)/UART1_TX/IIC4_SCL/EPHY_LNK_LED/WG2_D0)__________[PD]|[FS]________PWR_WAKEUP0, 44 (PWR_BUTTON1/PWR_GPIO[8](PWR_IIC_SCL)/UART1_RX/IIC4_SDA/EPHY_SPD_LED/WG2_D1)__________[PU]|[FS]________PWR_BUTTON1, 45 XTAL_XIN, 46 XTAL_XOUT, 47 (PWR_GPIO[0]/UART2_TX/PWR_UART0_RX/PWM[8])__________[PD]|[FS]__________PWR_GPIO0, 48 (PWR_GPIO[1](PWRSAR1.VIN2)/UART2_RX/EPHY_LNK_LED/PWM[9]/PWR_IIC_SCL/IIC2_SCL/CR_SDA0)__________[PD]|______________PWR_GPIO1, 49 (PWR_GPIO[2](PWRSAR.VIN1)/EPHY_SPD_LED/PWM[10]/PWR_IIC_SDA/IIC2_SDA/CR_2WTCK)__________[PD]|______________PWR_GPIO2
part E pins: 51 (PWR_SD1_D3_VO32/SPI2_CS_X/IIC1_SCL/PWR_GPIO[18]/CAM_MCLK0/UART3_CTS/PWR_SPINOR1_CS_X/PWM[4])______[DRV_HI+PD]|_____SD1_D3, 52 (PWR_SD1_D2_VO33/IIC1_SCL/UART2_TX/PWR_GPIO[19]/CAM_MCLK0/UART3_TX/PWR_SPINOR1_HOLD_X/PWM[5])__[PD->DRV_HI+PD]|_____SD1_D2, 53 (PWR_SD1_D1_VO34/IIC1_SDA/UART2_RX/PWR_GPIO[20]/CAM_MCLK1/UART3_RX/PWR_SPINOR1_WP_X/PWM[6])__[PD->DRV_HI+PD]|_____SD1_D1, 54 (PWR_SD1_D0_VO35/SPI2_SDI/IIC1_SDA/PWR_GPIO[21]/CAM_MCLK1/UART3_RTS/PWR_SPINOR1_MISO/PWM[7])_____________[PD]|_____SD1_D0, 55 (PWR_SD1_CMD_VO36/SPI2_SDO/IIC3_SCL/PWR_GPIO[22]/CAM_VS0/EPHY_LNK_LED/PWR_SPINOR1_MOSI/PWM[8])_____________[PD]|____SD1_CMD, 56 (PWR_SD1_CLK_VO37/SPI2_SCK/IIC3_SDA/PWR_GPIO[23]/CAM_HS0/EPHY_SPD_LED/PWR_SPINOR1_SCK/PWM[9])______[DRV_LO+PD]|____SD1_CLK, 57 VDDIO_SD1 (power)
part F pins: 58 (PWM[0]/XGPIOB[0])___[HIZ]|[FS]_________________PWM0_BUCK, 59 ((ADC1)/XGPIOB[3]/KEY_COL2)___[PD]|[FS]______________________ADC1, 60 (USB_VBUS_DET/XGPIOB[6]/CAM_MCLK0/CAM_MCLK1)__[HIZ]|__________________USB_VBUS_DET, 62 ((PAD_ETH_TXP)/UART3_RX/IIC1_SCL/XGPIOB[25]/PWM[13]/CAM_MCLK0/SPI1_SDO/IIS2_LRCK)__[HIZ]|________PAD_ETH_TXP___EPHY_RXN, 63 ((PAD_ETH_TXM)/UART3_RTS/IIC1_SDA/XGPIOB[24]/PWM[12]/CAM_MCLK1/SPI1_SDI/IIS2_BCLK)__[HIZ]|________PAD_ETH_TXM___EPHY_RXP, 64 ((PAD_ETH_RXP)/UART3_TX/CAM_MCLK1/XGPIOB[27]/PWM[15]/CAM_HS0/SPI1_SCK/IIS2_DO)__[HIZ]|________PAD_ETH_RXP___EPHY_TXN, 65 ((PAD_ETH_RXM)/UART3_CTS/CAM_MCLK0/XGPIOB[26]/PWM[14]/CAM_VS0/SPI1_CS_X/IIS2_DI)__[HIZ]|________PAD_ETH_RXM___EPHY_TXP, 66 VDD33A_ETH_USB, 67 ((GPIO_RTX)/XGPIOB[23]/PWM[1]/CAM_MCLK0)___[PD]|[FS]_______GPIO_RTX___EPHY_RTX, 68 VDD18A_USB_PLL_ETH (power), 69 USB_DP, 70 USB_DM
part G pins: 72 (CR_SCL0/VI0_CLK/VI1_D[13]/XGPIOC[2]/IIC1_SDA/CAM_MCLK0/KEY_ROW0/MUX_SPI1_SCK)__[PD]|_____PAD_MIPIRX4N, 73 (CR_SDA0/VI0_D[0]/VI1_D[14]/XGPIOC[3]/IIC1_SCL/CAM_MCLK1/KEY_ROW1/MUX_SPI1_CS)__[PD]|_____PAD_MIPIRX4P, 74 (CR_2WTMS/VI0_D[1]/VI1_D[15]/XGPIOC[4]/CAM_MCLK0/MUX_SPI1_MISO)__[PD]|_____PAD_MIPIRX3N, 75 (CR_2WTCK/VI0_D[2]/VI1_D[16]/XGPIOC[5]/MUX_SPI1_MOSI)__[PD]|_____PAD_MIPIRX3P, 76 ((PAD_MIPIRX2N)/VI0_D[3]/VO_D[10]/XGPIOC[6]/VI1_D[17]/IIC4_SCL/DBG[6])__[PD]|_____PAD_MIPIRX2N, 77 ((PAD_MIPIRX2P)/VI0_D[4]/VO_D[9]/XGPIOC[7]/VI1_D[18]/IIC4_SDA/DBG[7])__[PD]|_____PAD_MIPIRX2P, 78 ((PAD_MIPIRX1N)/VI0_D[5]/VO_D[8]/XGPIOC[8]/KEY_ROW3/DBG[8])__[PD]|_____PAD_MIPIRX1N, 79 ((PAD_MIPIRX1P)/VI0_D[6]/VO_D[7]/XGPIOC[9]/IIC1_SDA/KEY_ROW2/DBG[9])__[PD]|_____PAD_MIPIRX1P, 80 ((PAD_MIPIRX0N)/VI0_D[7]/VO_D[6]/XGPIOC[10]/IIC1_SCL/CAM_MCLK1/DBG[10])__[PD]|_____PAD_MIPIRX0N, 81 ((PAD_MIPIRX0P)/VI0_D[8]/VO_D[5]/XGPIOC[11]/CAM_MCLK0/DBG[11])__[PD]|_____PAD_MIPIRX0P, 82 VDD18A_MIPI (power), 83 (CR_SDA0/VI0_D[13]/VO_D[0]/XGPIOC[16]/IIC1_SDA/PWM[8]/SPI0_SCK/SD1_D2)__[PD]|____PAD_MIPI_TXM2, 84 (CR_SCL0/VI0_D[14]/VO_CLK0/XGPIOC[17]/IIC1_SCL/PWM[9]/SPI0_CS_X/SD1_D3)__[PD]|____PAD_MIPI_TXP2, 85 (CR_2WTMS/VI0_D[11]/VO_D[2]/XGPIOC[14]/IIC2_SDA/PWM[10]/SPI0_SDO/DBG[14])__[PD]|____PAD_MIPI_TXM1, 86 (CR_2WTCK/VI0_D[12]/VO_D[1]/XGPIOC[15]/IIC2_SCL/PWM[11]/SPI0_SDI/DBG[15])__[PD]|____PAD_MIPI_TXP1, 87 ((PAD_MIPI_TXM0)/VI0_D[9]/VO_D[4]/XGPIOC[12]/CAM_MCLK1/PWM[14]/CAM_VS0/DBG[12])__[PD]|____PAD_MIPI_TXM0, 88 ((PAD_MIPI_TXP0)/VI0_D[10]/VO_D[3]/XGPIOC[13]/CAM_MCLK0/PWM[15]/CAM_HS0/DBG[13])__[PD]|____PAD_MIPI_TXP0
part B text: 1p8V only
part C text: VDDIO0_SD0_EMMC; 3P3V or 1P8V; CV181xC This PIN Not Support I2C0
part D text: VDDC_RTC Cap to GND; 1p8V only
part E text: 3p3V or 1p8V
part F text: 1p8V only
part G text: 1p8V only

## PCIE X 64_0
designator J?, comment PCIE_X_64_Pin_B
Value: PCIE_X_64_Pin_B
part A pins: A1 B1, A2, A3 B2, A4, A5, A6, A7, A8, A9, A10, A11, A12, A13, A14, A15, A16, A17, A18, A19, A20, A21, A22, A23, A24, A25, A26, A27, A28, A29, A30, A31, A32
part B pins: B1, B2, B3 A2, B4 A5, B5 A4, B6 A7, B7 A6, B8 A9, B9 A8, B10 A11, B11 A10, B12 A13, B13 A12, B14 A15, B15 A14, B16 A17, B17 A16, B18 A19, B19 A18, B20 A21, B21 A20, B22 A23, B23 A22, B24 A25, B25 A24, B26 A27, B27 A26, B28 A29, B29 A28, B30 A31, B31 A30, B32 A32

## PHONE JACK-3_LR_0
designator J?, comment PJD-035-38D
Value: PJD-035-38D
pins: 1, 2, 3

## PHONOJACK STEREO-14_0
designator J?
pins: 1, 2, 3, 4

## PHONOJACK STEREO-14_1
designator J?
pins: 1, 2, 3, 4

## Q_FET_P_ENH_0
designator Q?, comment MDV3604URH
ÌùÆ¬P MOS¹Ü,MDV3604URH,-20A,-30V,PDFN33; SYM4PACK_TYPE: 1G1D3S; OriginalSymbolOrigin: (-50,150); Cloud IC Number: Y202V3604016; MAX_CURRENT: ?; MAX_VOLTAGE: ?; MAX_WATTAGE: ?; NV_PN: ?; PACK_TYPE: ?; PATH: ?; PLACEMENT_NOTE: ?; Q_G: ?; R_DS_ON: ?; SKU: COMMON; V_BE_GS: ?; Value: MDV3604URH
footprint PDFN33-3_3X3_3X0_8
pins: 1 S1, 2 S2, 3 S3, 4 G (io), 5 D1, 6 D2, 7 D3, 8 D4, 9 D5, 10 D6, 11 D7

## Q_FET_P_ENH_1
designator Q?, comment MDV3604URH
ÌùÆ¬P MOS¹Ü,MDV3604URH,-20A,-30V,PDFN33; Cloud IC Number: Y202V3604016; OriginalSymbolOrigin: (-50,150); SYM4PACK_TYPE: 1G1D3S; V_BE_GS: ?; SKU: COMMON; R_DS_ON: ?; Q_G: ?; PLACEMENT_NOTE: ?; PATH: ?; PACK_TYPE: ?; NV_PN: ?; MAX_WATTAGE: ?; MAX_VOLTAGE: ?; MAX_CURRENT: ?; Value: MDV3604URH
footprint PDFN33-3_3X3_3X0_8
pins: 1 S1, 2 S2, 3 S3, 4 G (io), 5 D1, 6 D2, 7 D3, 8 D4

## QFN88_0
designator U?, comment CV1822_QFN
Value: CV1822_QFN
pins: 1 AUD_VREF, 2 AUD_MIC_L, 3 AUD_OUT, 4 VDD18A, 5 SD0_CLK, 6 SD0_CMD, 7 SD0_D0, 8 SD0_D1, 9 VDDC, 10 SD0_D2, 11 SD0_D3, 12 VDDIO_SD0, 13 VDDIO_eMMC, 14 SD_CD, 15 SD_PWR_EN, 16 VDDC, 17 SPK_EN, 18 UART0_TX, 19 UART0_RX, 20 JTAG_CPU_TCK, 21 JTAG_CPU_TMS, 22 eMMC_CLK, 23 eMMC_CMD, 24 eMMC_DATA0, 25 eMMC_DATA1, 26 eMMC_DATA2, 27 eMMC_DATA3, 28 I2C1_SCL, 29 I2C1_SDA, 30 CLK_AUX, 31 VDDC, 32 VDDQ_DRAM, 33 VDDQ, 34 VDDQ, 35 VDDQ_DRAM, 36 VDD18A, 37 VDD18A_RTC, 38 PWR_VBAT_DET, 39 VDDC_RTC, 40 PWR_RSTN, 41 PWR_SEQ1, 42 PWR_SEQ2, 43 PTEST, 44 PWR_WAKEUP, 45 PWR_BUTTON1, 46 RTC_XIN, 47 RTC_XOUT, 48 XTAL_XOUT, 49 XTAL_XIN, 50 VDDC, 51 SD2_DAT3, 52 SD2_DAT2, 53 SD2_DAT1, 54 SD2_DAT0, 55 SD2_CMD, 56 SD2_CLK, 57 VDDIO_SD2, 58 PWM0_BUCK, 59 ADC1, 60 USB_VBUS_DET, 61 VDDC, 62 VDD18A, 63 EPHY_TXP, 64 EPHY_TXN, 65 EPHY_RXN, 66 EPHY_RXP, 67 VDD33A, 68 USB_DM, 69 USB_DP, 70 VDD18A, 71 VDDC, 72 MIPI_RX4P, 73 MIPI_RX4N, 74 MIPI_RX3P, 75 MIPI_RX3N, 76 MIPI_RX2P, 77 MIPI_RX2N, 78 MIPI_RX1P, 79 MIPI_RX1N, 80 MIPI_RX0P, 81 MIPI_RX0N, 82 VDD18A, 83 MIPI_TXM2, 84 MIPI_TXP2, 85 MIPI_TXM1, 86 MIPI_TXP1, 87 MIPI_TXM0, 88 MIPI_TXP0, 89 E-PAD

## QFN88_1
designator U?, comment CV1822_QFN
Value: CV1822_QFN
pins: 1 AUD_VREF, 2 AUD_MIC_L, 3 AUD_OUT, 4 VDD18A_AUD, 5 SD0_CLK, 6 SD0_CMD, 7 SD0_D0, 8 VDDC, 9 SD0_D1, 10 SD0_D2, 11 SD0_D3, 12 VDDIO_SD0, 13 VDDIO_eMMC, 14 SD_CD, 15 SD_PWR_EN, 16 VDDC, 17 SPK_EN, 18 UART0_TX, 19 UART0_RX, 20 JTAG_CPU_TCK, 21 JTAG_CPU_TMS, 22 eMMC_CLK, 23 eMMC_CMD, 24 eMMC_DATA0, 25 eMMC_DATA1, 26 eMMC_DATA2, 27 eMMC_DATA3, 28 I2C1_SCL, 29 I2C1_SDA, 30 CLK_AUX, 31 VDDQ_DRAM, 32 VDDQ, 33 VDDQ, 34 VDDQ_DRAM, 35 VDD18A, 36 VDD18A_RTC, 37 PWR_VBAT_DET, 38 VDDC_RTC, 39 PWR_RSTN, 40 PWR_SEQ1, 41 PWR_SEQ2, 42 PTEST, 43 PWR_WAKEUP, 44 PWR_BUTTON1, 45 XTAL_XIN, 46 XTAL_OUT, 47 RTC_GPIO0, 48 RTC_GPIO1, 49 RTC_GPIO2, 50 VDDC, 51 SD2_DAT3, 52 SD2_DAT2, 53 SD2_DAT1, 54 SD2_DAT0, 55 SD2_CMD, 56 SD2_CLK, 57 VDDIO_SD2, 58 PWM0_BUCK, 59 ADC1, 60 USB_VBUS_DET, 61 VDDC, 62 VDD18A, 63 EPHY_TXP, 64 EPHY_TXN, 65 EPHY_RXN, 66 EPHY_RXP, 67 VDD33A, 68 USB_DM, 69 USB_DP, 70 VDD18A, 71 VDDC, 72 MIPI_RX4P, 73 MIPI_RX4N, 74 MIPI_RX3P, 75 MIPI_RX3N, 76 MIPI_RX2P, 77 MIPI_RX2N, 78 MIPI_RX1P, 79 MIPI_RX1N, 80 MIPI_RX0P, 81 MIPI_RX0N, 82 VDD18A, 83 MIPI_TXM2, 84 MIPI_TXP2, 85 MIPI_TXM1, 86 MIPI_TXP1, 87 MIPI_TXM0, 88 MIPI_TXP0, 89 E-PAD

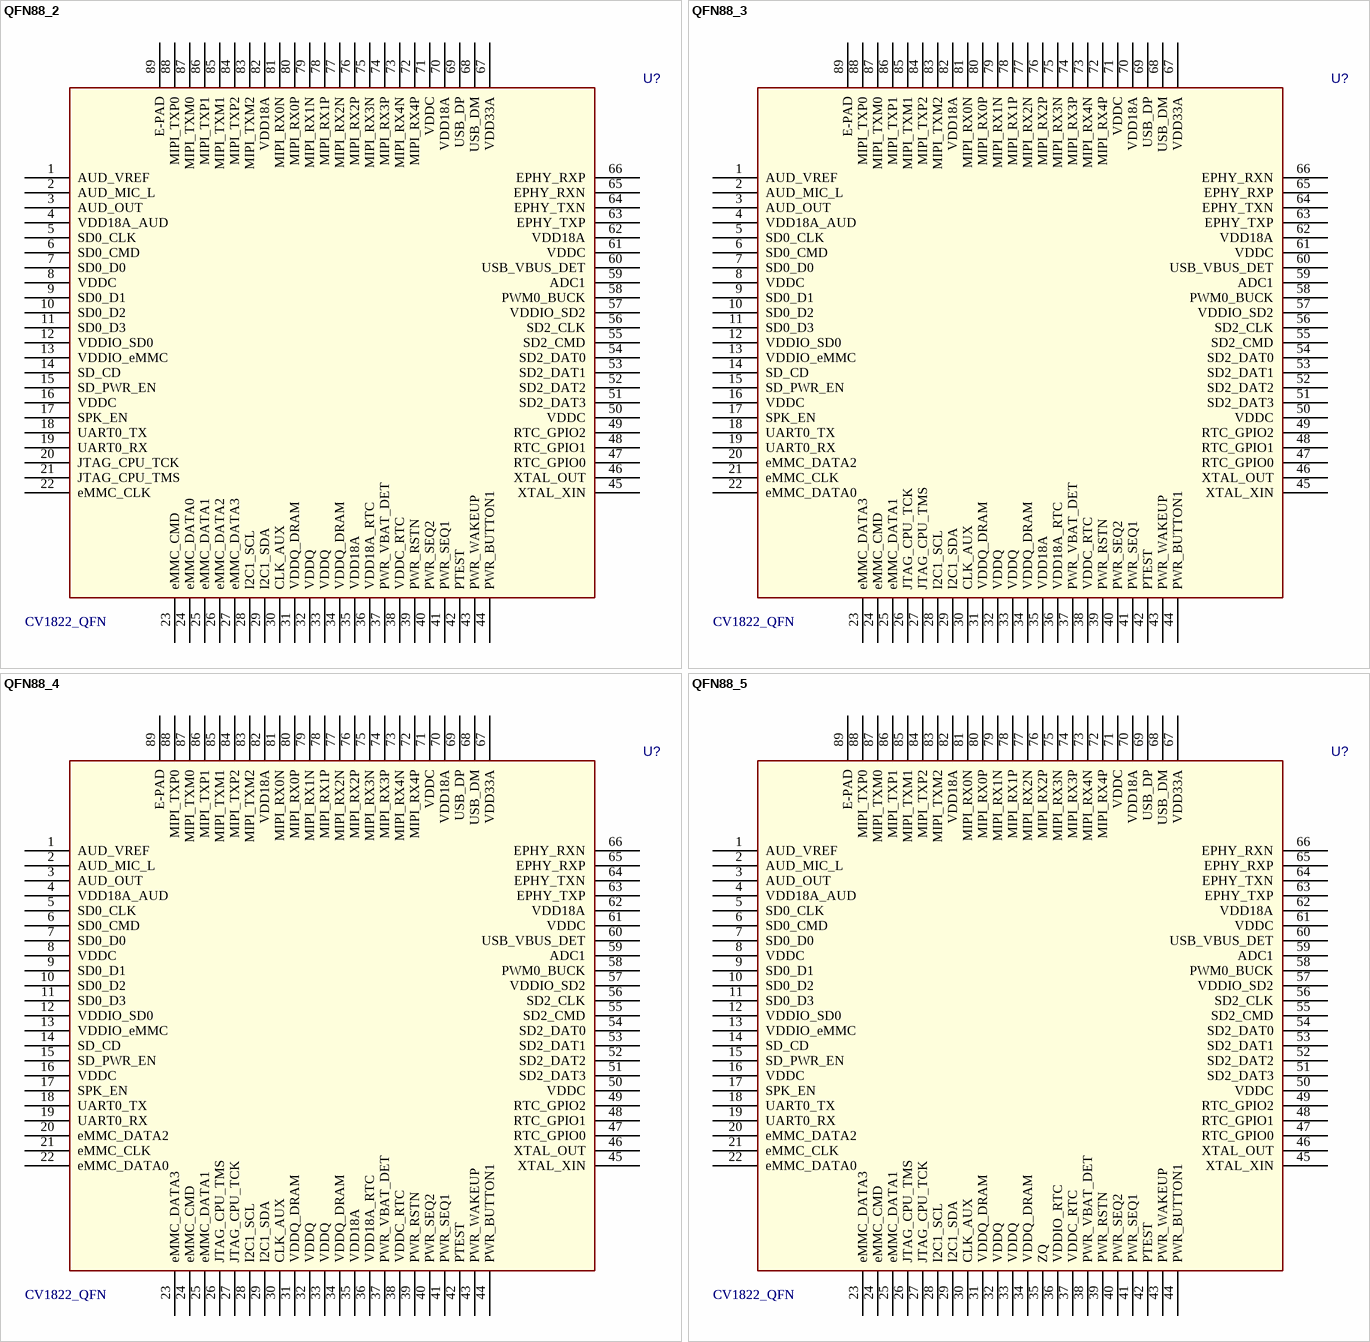
[diagram p45: symbols QFN88_2 to QFN88_5]

## QFN88_2
designator U?, comment CV1822_QFN
Value: CV1822_QFN
pins: 1 AUD_VREF, 2 AUD_MIC_L, 3 AUD_OUT, 4 VDD18A_AUD, 5 SD0_CLK, 6 SD0_CMD, 7 SD0_D0, 8 VDDC, 9 SD0_D1, 10 SD0_D2, 11 SD0_D3, 12 VDDIO_SD0, 13 VDDIO_eMMC, 14 SD_CD, 15 SD_PWR_EN, 16 VDDC, 17 SPK_EN, 18 UART0_TX, 19 UART0_RX, 20 JTAG_CPU_TCK, 21 JTAG_CPU_TMS, 22 eMMC_CLK, 23 eMMC_CMD, 24 eMMC_DATA0, 25 eMMC_DATA1, 26 eMMC_DATA2, 27 eMMC_DATA3, 28 I2C1_SCL, 29 I2C1_SDA, 30 CLK_AUX, 31 VDDQ_DRAM, 32 VDDQ, 33 VDDQ, 34 VDDQ_DRAM, 35 VDD18A, 36 VDD18A_RTC, 37 PWR_VBAT_DET, 38 VDDC_RTC, 39 PWR_RSTN, 40 PWR_SEQ2, 41 PWR_SEQ1, 42 PTEST, 43 PWR_WAKEUP, 44 PWR_BUTTON1, 45 XTAL_XIN, 46 XTAL_OUT, 47 RTC_GPIO0, 48 RTC_GPIO1, 49 RTC_GPIO2, 50 VDDC, 51 SD2_DAT3, 52 SD2_DAT2, 53 SD2_DAT1, 54 SD2_DAT0, 55 SD2_CMD, 56 SD2_CLK, 57 VDDIO_SD2, 58 PWM0_BUCK, 59 ADC1, 60 USB_VBUS_DET, 61 VDDC, 62 VDD18A, 63 EPHY_TXP, 64 EPHY_TXN, 65 EPHY_RXN, 66 EPHY_RXP, 67 VDD33A, 68 USB_DM, 69 USB_DP, 70 VDD18A, 71 VDDC, 72 MIPI_RX4P, 73 MIPI_RX4N, 74 MIPI_RX3P, 75 MIPI_RX3N, 76 MIPI_RX2P, 77 MIPI_RX2N, 78 MIPI_RX1P, 79 MIPI_RX1N, 80 MIPI_RX0P, 81 MIPI_RX0N, 82 VDD18A, 83 MIPI_TXM2, 84 MIPI_TXP2, 85 MIPI_TXM1, 86 MIPI_TXP1, 87 MIPI_TXM0, 88 MIPI_TXP0, 89 E-PAD